# Altium integrated library VIETTIEN.IntLib: 150 symbols (part 5 of 7)

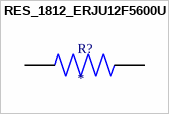
[diagram p92: symbol RES_1812_ERJU12F5600U]

## RES_1812_ERJU12F5600U
designator R?
RES 1812; MP: ERJU12F5600U; Package: None; Value: *; Availability: Unavailable; Price: None
footprint RES_ERJU12F5600U
pins: 1, 2


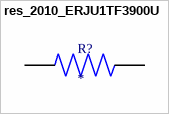
[diagram p93: symbol res_2010_ERJU1TF3900U]

## res_2010_ERJU1TF3900U
designator R?
RES 2010; MP: ERJU1TF3900U; Price: None; Value: *; Availability: Unavailable; Package: None
footprint RES_ERJU1TF3900U
pins: 1, 2


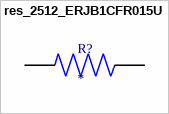
[diagram p94: symbol res_2512_ERJB1CFR015U]

## res_2512_ERJB1CFR015U
designator R?
RES 2512; MP: ERJB1CFR015U; Price: None; Value: *; Package: None; Availability: Unavailable
footprint RES_ERJB1CFR015U
pins: 1, 2


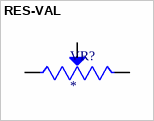
[diagram p95: symbol RES-VAL]

## RES-VAL
designator VR?
Trimmer, Cermet, Rest 1 Kilohms, PCB, 25 Turns, Pwr-Rtg 0.5W | Bourns 3296W-1-102LF; SnapEDA_Link: https://www.snapeda.com/parts/3296W-1-102LF/Bourns/view-part/?ref=snap; Package: NON STANDARD-3 Bourns; Value: *; MF: Bourns; MP: 3296W-1-102LF; Check_prices: https://www.snapeda.com/parts/3296W-1-102LF/Bourns/view-part/?ref=eda
footprint TRIM_3296W-1-102LF
pins: 1 CCW, 2 WIPER, 3 CW


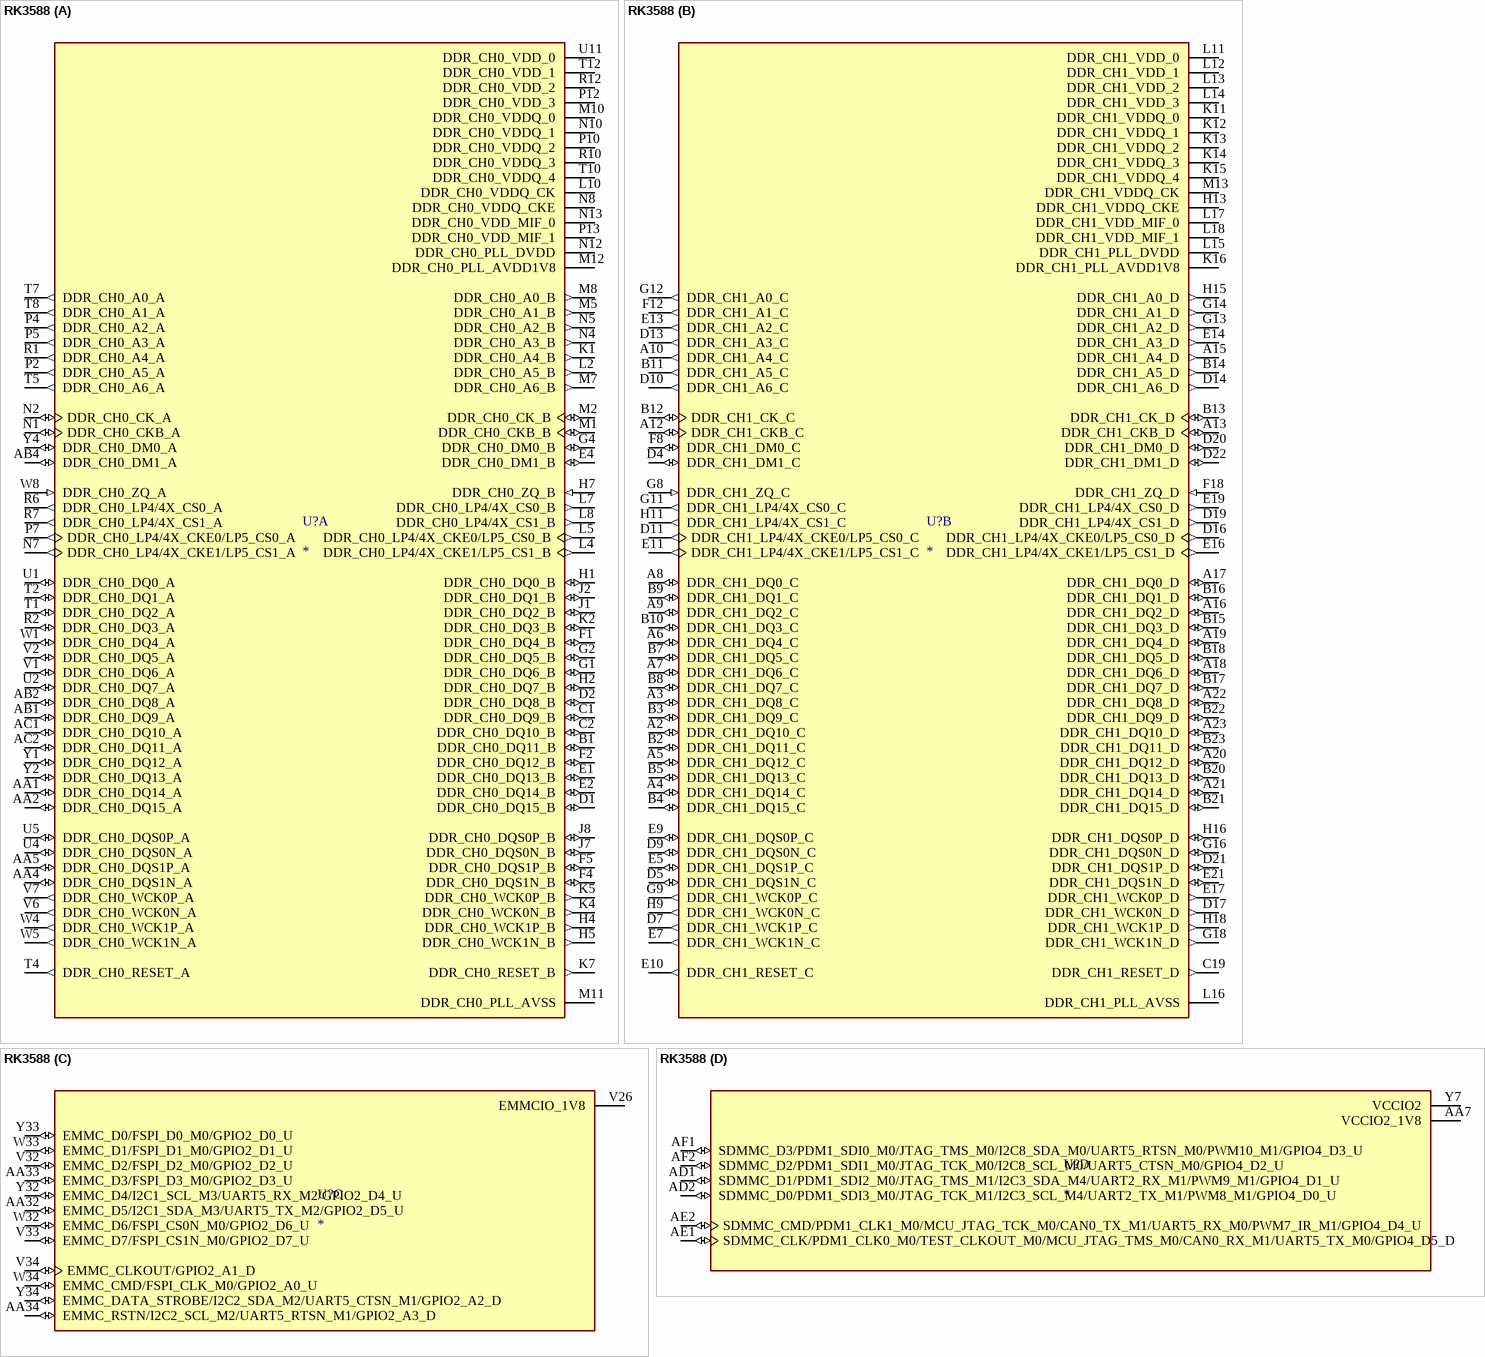
[diagram p96: symbol RK3588]

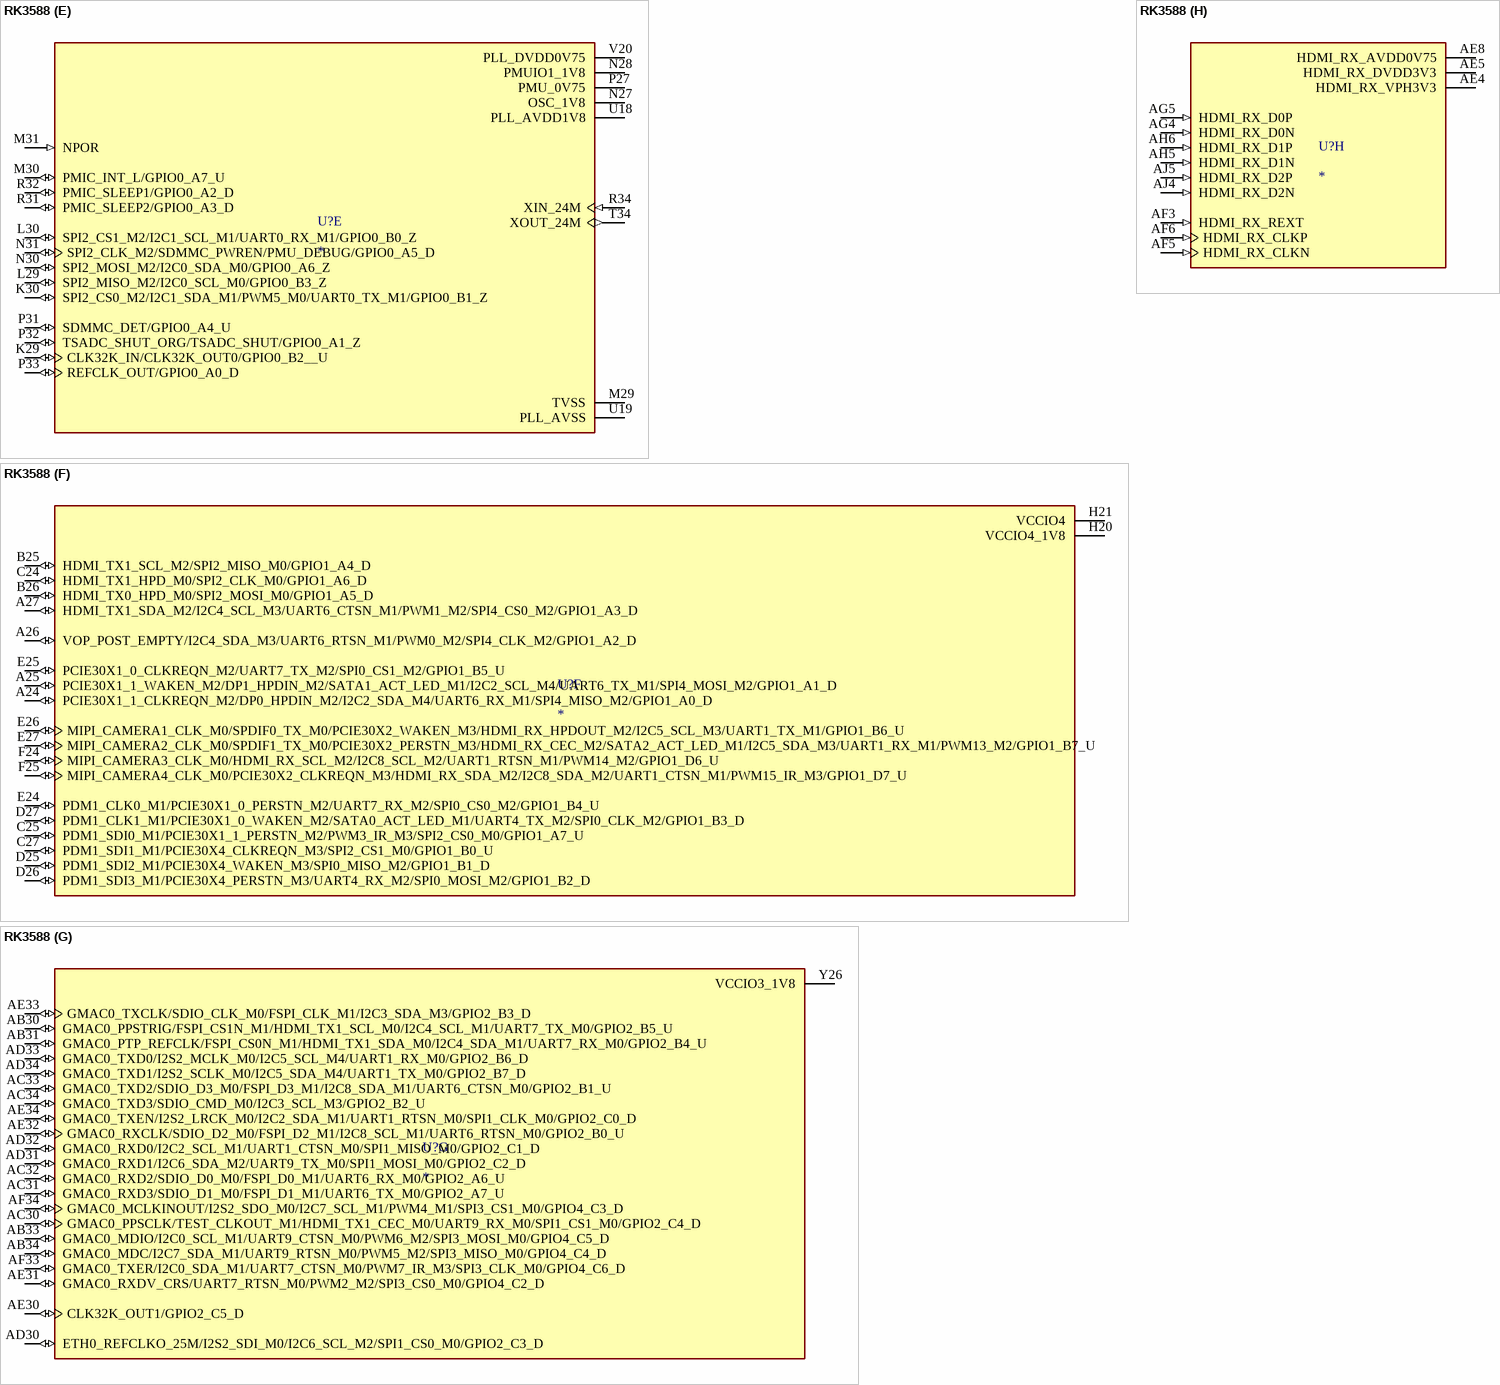
[diagram p97: symbol RK3588]

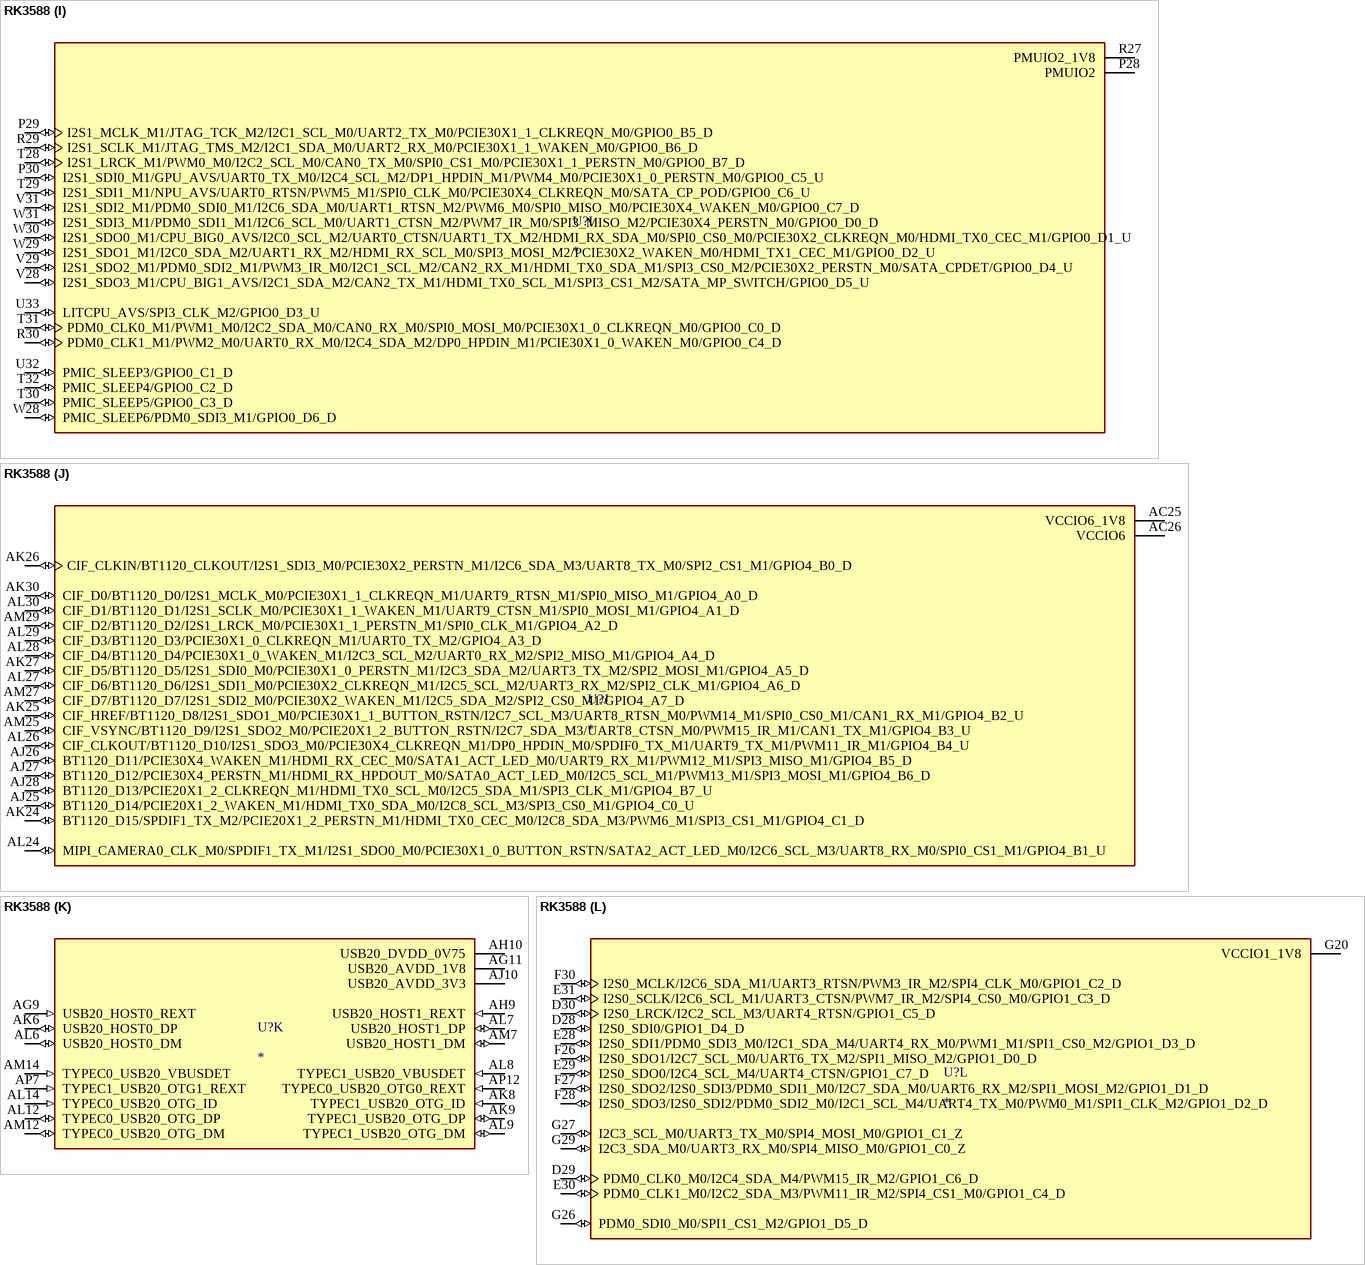
[diagram p98: symbol RK3588]

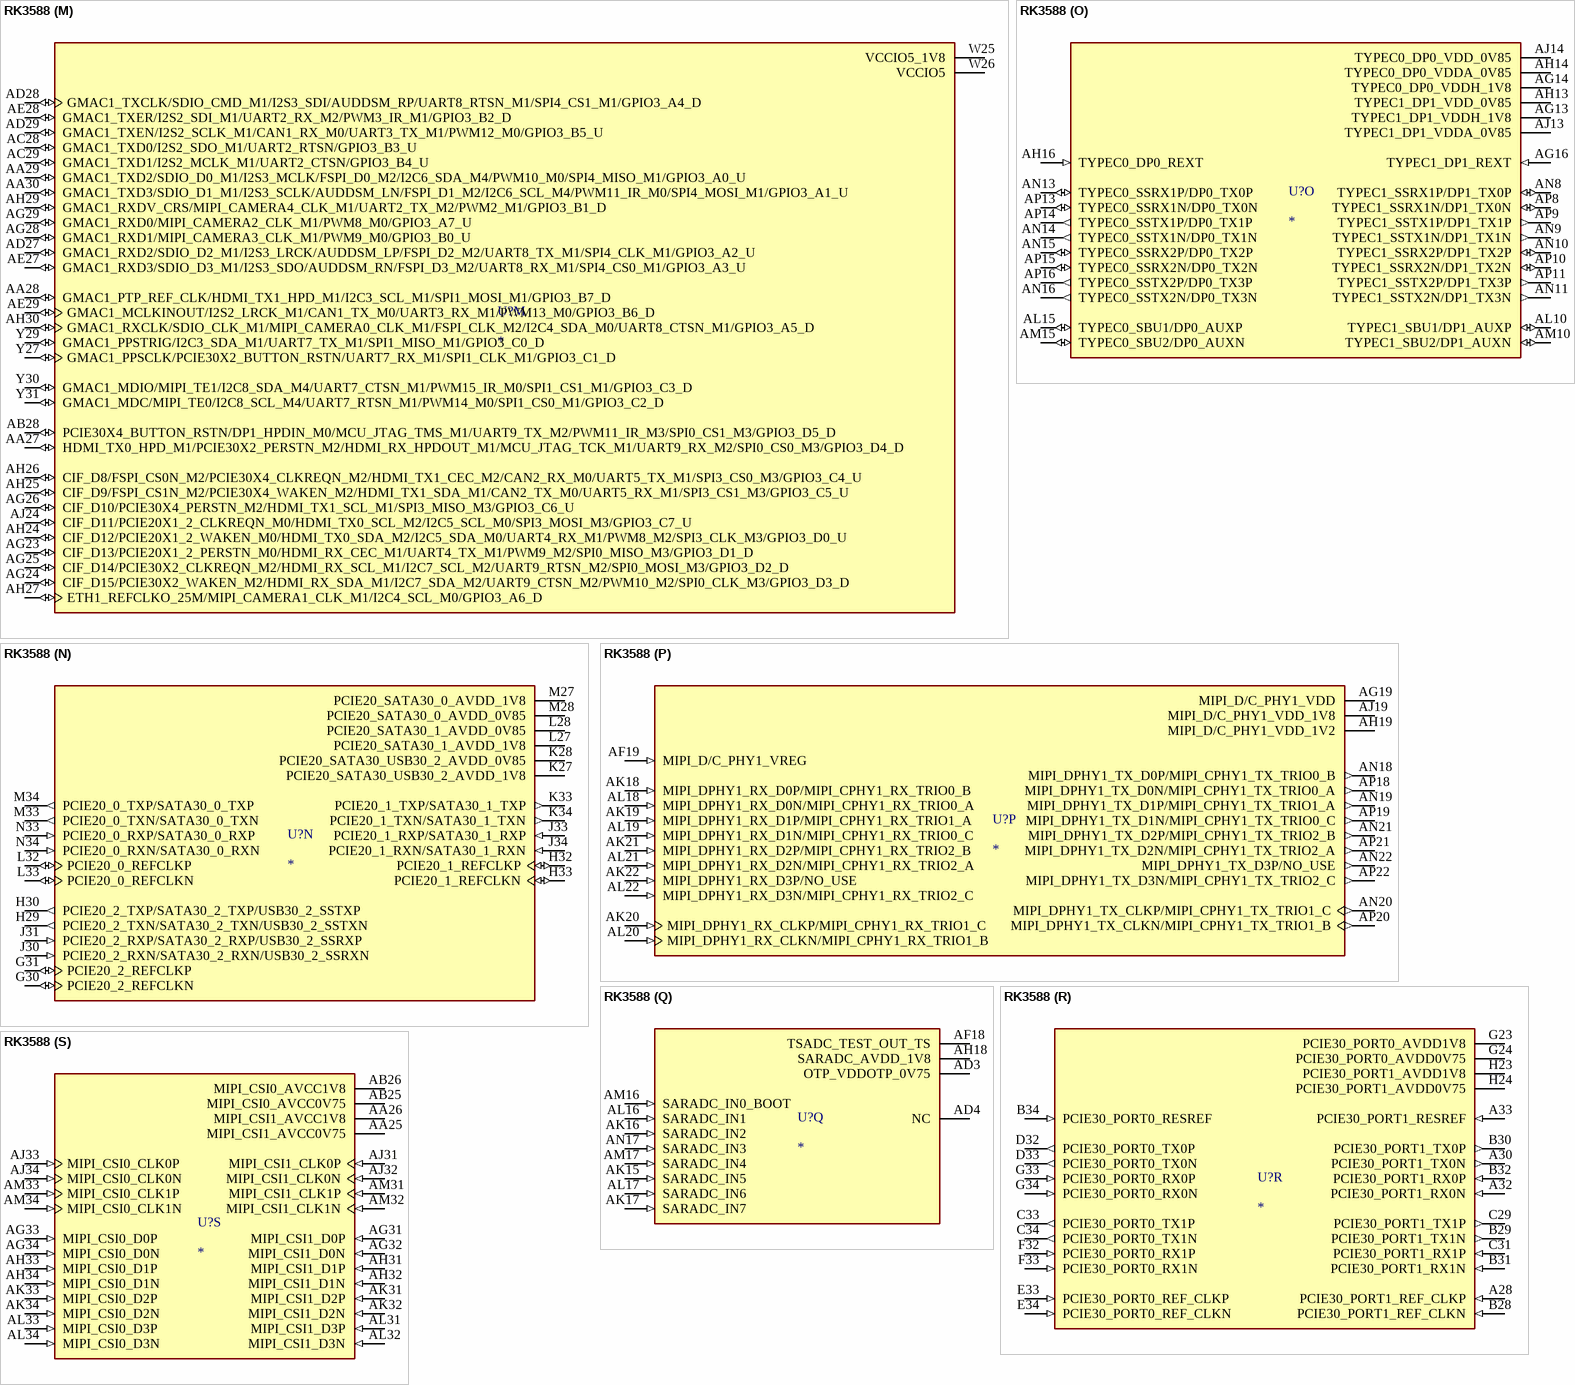
[diagram p99: symbol RK3588]

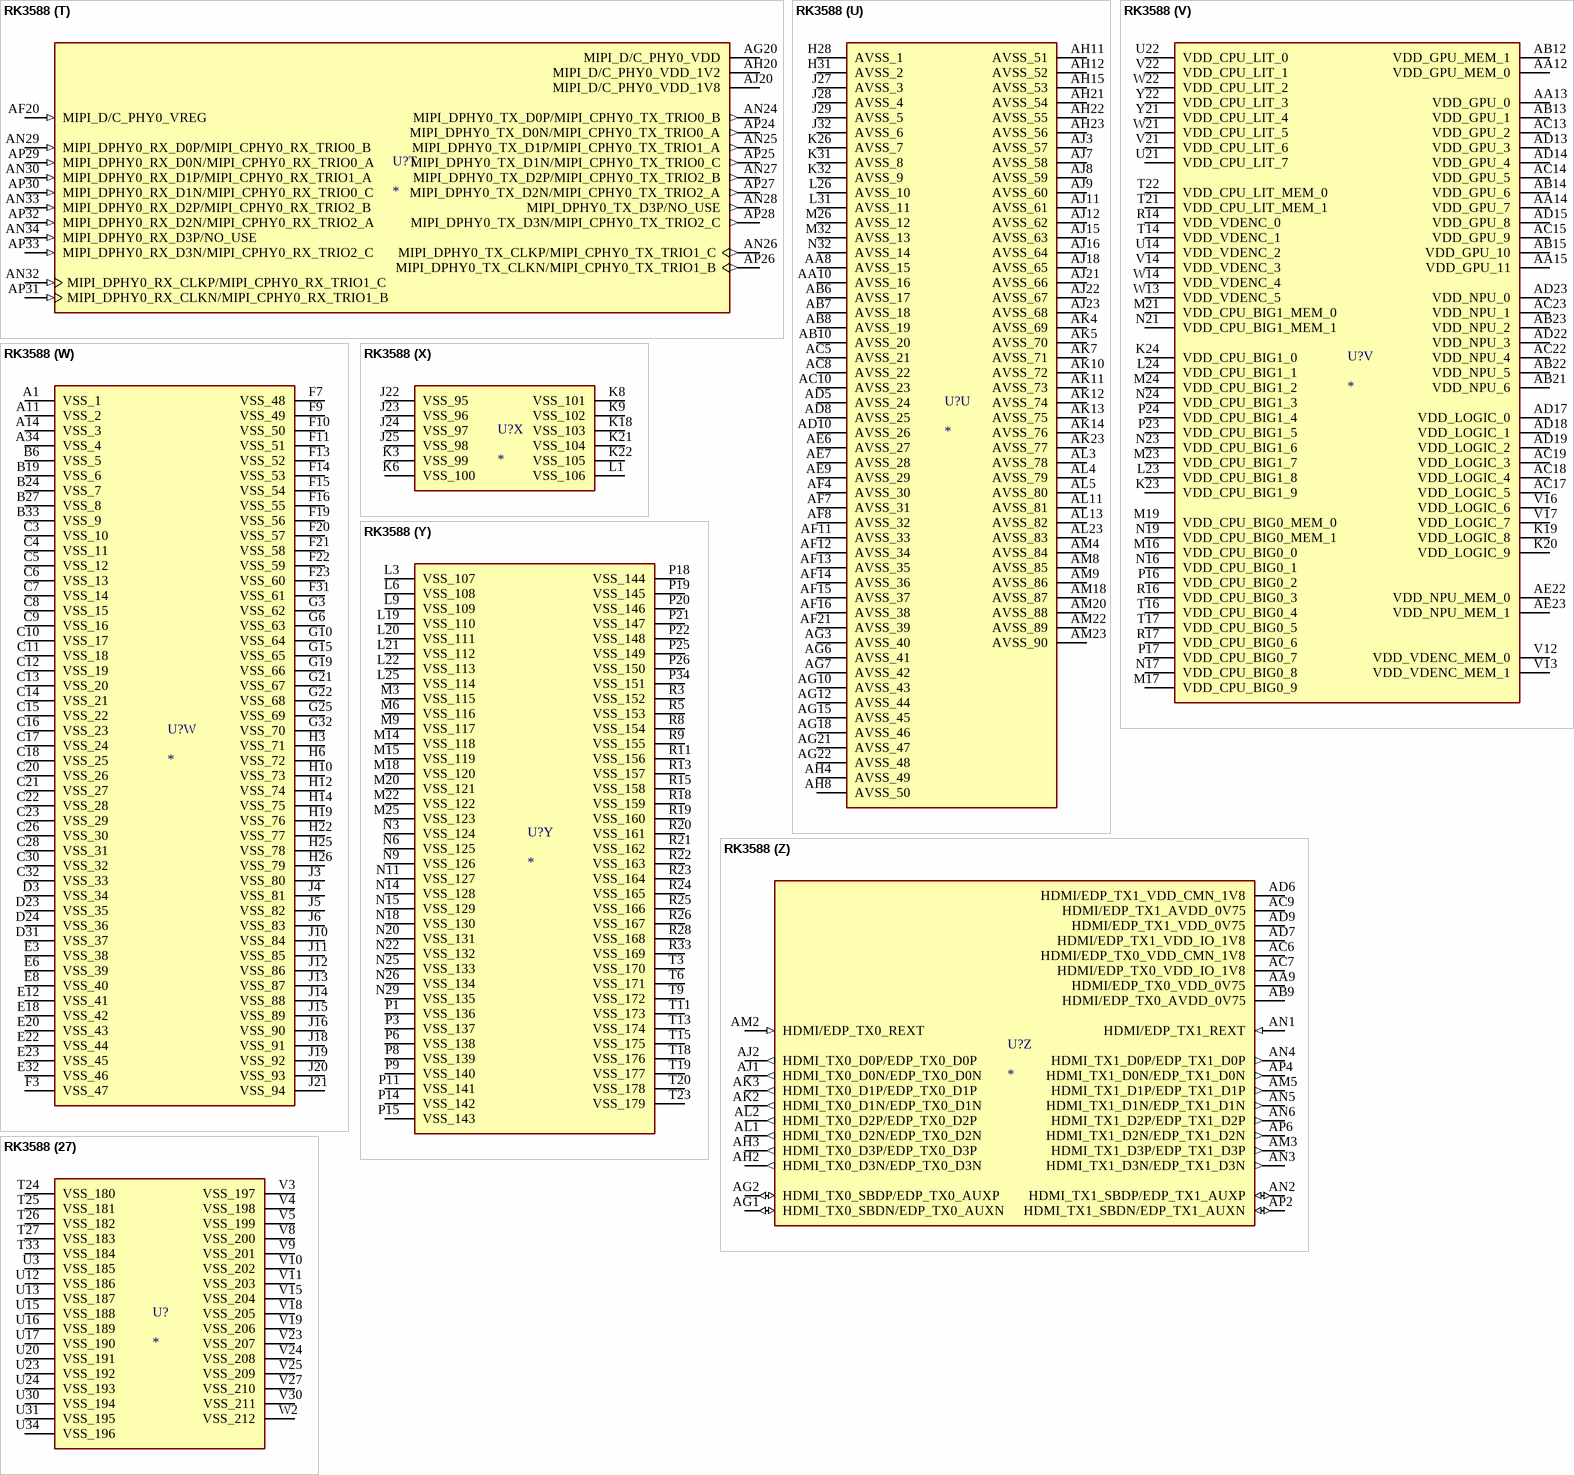
[diagram p100: symbol RK3588]

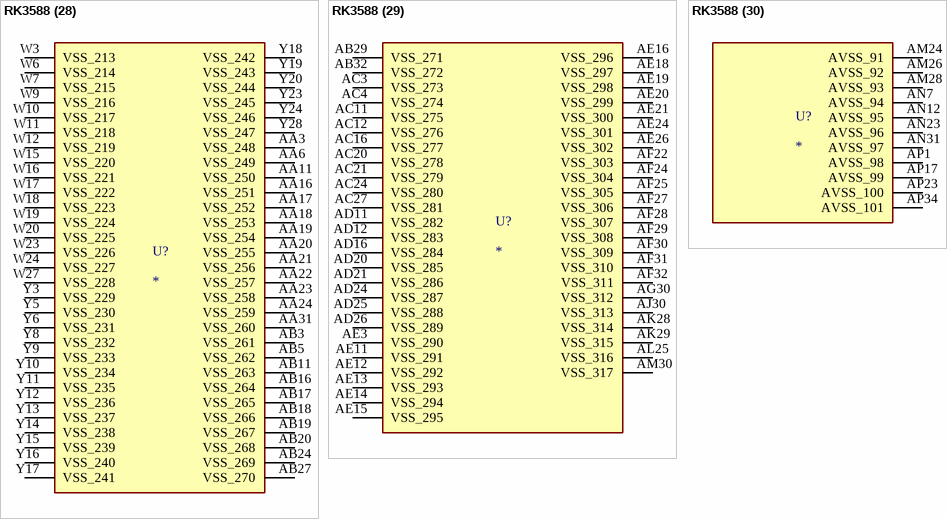
[diagram p101: symbol RK3588]

## RK3588
designator U?
low power, high performance processor; MF: Fuzhou Rockchip Electronics Co; MP: RK3588; SnapEDA_Link: https://www.snapeda.com/parts/RK3588/Fuzhou+Rockchip+Electronics+Co/view-part/?ref=snap; Package: None; Value: *; Check_prices: https://www.snapeda.com/parts/RK3588/Fuzhou+Rockchip+Electronics+Co/view-part/?ref=eda
footprint BGA1088C65P34X34_2300X2300X204N
part A pins: AA1 DDR_CH0_DQ14_A (io), AA2 DDR_CH0_DQ15_A (io), AA4 DDR_CH0_DQS1N_A (io), AA5 DDR_CH0_DQS1P_A (io), AB1 DDR_CH0_DQ9_A (io), AB2 DDR_CH0_DQ8_A (io), AB4 DDR_CH0_DM1_A (io), AC1 DDR_CH0_DQ10_A (io), AC2 DDR_CH0_DQ11_A (io), B1 DDR_CH0_DQ11_B (io), C1 DDR_CH0_DQ9_B (io), C2 DDR_CH0_DQ10_B (io), D1 DDR_CH0_DQ15_B (io), D2 DDR_CH0_DQ8_B (io), E1 DDR_CH0_DQ13_B (io), E2 DDR_CH0_DQ14_B (io), E4 DDR_CH0_DM1_B (io), F1 DDR_CH0_DQ4_B (io), F2 DDR_CH0_DQ12_B (io), F4 DDR_CH0_DQS1N_B (io), F5 DDR_CH0_DQS1P_B (io), G1 DDR_CH0_DQ6_B (io), G2 DDR_CH0_DQ5_B (io), G4 DDR_CH0_DM0_B (io), H1 DDR_CH0_DQ0_B (io), H2 DDR_CH0_DQ7_B (io), H4 DDR_CH0_WCK1P_B (out), H5 DDR_CH0_WCK1N_B (out), H7 DDR_CH0_ZQ_B (in), J1 DDR_CH0_DQ2_B (io), J2 DDR_CH0_DQ1_B (io), J7 DDR_CH0_DQS0N_B (io), J8 DDR_CH0_DQS0P_B (io), K1 DDR_CH0_A4_B (out), K2 DDR_CH0_DQ3_B (io), K4 DDR_CH0_WCK0N_B (out), K5 DDR_CH0_WCK0P_B (out), K7 DDR_CH0_RESET_B (out), L2 DDR_CH0_A5_B (out), L4 DDR_CH0_LP4/4X_CKE1/LP5_CS1_B (out), L5 DDR_CH0_LP4/4X_CKE0/LP5_CS0_B (out), L7 DDR_CH0_LP4/4X_CS0_B (out), L8 DDR_CH0_LP4/4X_CS1_B (out), L10 DDR_CH0_VDDQ_CK (power), M1 DDR_CH0_CKB_B (io), M2 DDR_CH0_CK_B (io), M5 DDR_CH0_A1_B (out), M7 DDR_CH0_A6_B (out), M8 DDR_CH0_A0_B (out), M10 DDR_CH0_VDDQ_0 (power), M11 DDR_CH0_PLL_AVSS (power), M12 DDR_CH0_PLL_AVDD1V8 (power), N1 DDR_CH0_CKB_A (io), N2 DDR_CH0_CK_A (io), N4 DDR_CH0_A3_B (out), N5 DDR_CH0_A2_B (out), N7 DDR_CH0_LP4/4X_CKE1/LP5_CS1_A (out), N8 DDR_CH0_VDDQ_CKE (power), N10 DDR_CH0_VDDQ_1 (power), N12 DDR_CH0_PLL_DVDD (power), N13 DDR_CH0_VDD_MIF_0 (power), P2 DDR_CH0_A5_A (out), P4 DDR_CH0_A2_A (out), P5 DDR_CH0_A3_A (out), P7 DDR_CH0_LP4/4X_CKE0/LP5_CS0_A (out), P10 DDR_CH0_VDDQ_2 (power), P12 DDR_CH0_VDD_3 (power), P13 DDR_CH0_VDD_MIF_1 (power), R1 DDR_CH0_A4_A (out), R2 DDR_CH0_DQ3_A (io), R6 DDR_CH0_LP4/4X_CS0_A (out), R7 DDR_CH0_LP4/4X_CS1_A (out), R10 DDR_CH0_VDDQ_3 (power), R12 DDR_CH0_VDD_2 (power), T1 DDR_CH0_DQ2_A (io), T2 DDR_CH0_DQ1_A (io), T4 DDR_CH0_RESET_A (out), T5 DDR_CH0_A6_A (out), T7 DDR_CH0_A0_A (out), T8 DDR_CH0_A1_A (out), T10 DDR_CH0_VDDQ_4 (power), T12 DDR_CH0_VDD_1 (power), U1 DDR_CH0_DQ0_A (io), U2 DDR_CH0_DQ7_A (io), U4 DDR_CH0_DQS0N_A (io), U5 DDR_CH0_DQS0P_A (io), U11 DDR_CH0_VDD_0 (power), V1 DDR_CH0_DQ6_A (io), V2 DDR_CH0_DQ5_A (io), V6 DDR_CH0_WCK0N_A (out), V7 DDR_CH0_WCK0P_A (out), W1 DDR_CH0_DQ4_A (io), W4 DDR_CH0_WCK1P_A (out), W5 DDR_CH0_WCK1N_A (out), W8 DDR_CH0_ZQ_A (in), Y1 DDR_CH0_DQ12_A (io), Y2 DDR_CH0_DQ13_A (io), Y4 DDR_CH0_DM0_A (io)
part B pins: A2 DDR_CH1_DQ10_C (io), A3 DDR_CH1_DQ8_C (io), A4 DDR_CH1_DQ14_C (io), A5 DDR_CH1_DQ12_C (io), A6 DDR_CH1_DQ4_C (io), A7 DDR_CH1_DQ6_C (io), A8 DDR_CH1_DQ0_C (io), A9 DDR_CH1_DQ2_C (io), A10 DDR_CH1_A4_C (out), A12 DDR_CH1_CKB_C (io), A13 DDR_CH1_CKB_D (io), A15 DDR_CH1_A4_D (out), A16 DDR_CH1_DQ2_D (io), A17 DDR_CH1_DQ0_D (io), A18 DDR_CH1_DQ6_D (io), A19 DDR_CH1_DQ4_D (io), A20 DDR_CH1_DQ12_D (io), A21 DDR_CH1_DQ14_D (io), A22 DDR_CH1_DQ8_D (io), A23 DDR_CH1_DQ10_D (io), B2 DDR_CH1_DQ11_C (io), B3 DDR_CH1_DQ9_C (io), B4 DDR_CH1_DQ15_C (io), B5 DDR_CH1_DQ13_C (io), B7 DDR_CH1_DQ5_C (io), B8 DDR_CH1_DQ7_C (io), B9 DDR_CH1_DQ1_C (io), B10 DDR_CH1_DQ3_C (io), B11 DDR_CH1_A5_C (out), B12 DDR_CH1_CK_C (io), B13 DDR_CH1_CK_D (io), B14 DDR_CH1_A5_D (out), B15 DDR_CH1_DQ3_D (io), B16 DDR_CH1_DQ1_D (io), B17 DDR_CH1_DQ7_D (io), B18 DDR_CH1_DQ5_D (io), B20 DDR_CH1_DQ13_D (io), B21 DDR_CH1_DQ15_D (io), B22 DDR_CH1_DQ9_D (io), B23 DDR_CH1_DQ11_D (io), C19 DDR_CH1_RESET_D (out), D4 DDR_CH1_DM1_C (io), D5 DDR_CH1_DQS1N_C (io), D7 DDR_CH1_WCK1P_C (out), D9 DDR_CH1_DQS0N_C (io), D10 DDR_CH1_A6_C (out), D11 DDR_CH1_LP4/4X_CKE0/LP5_CS0_C (out), D13 DDR_CH1_A3_C (out), D14 DDR_CH1_A6_D (out), D16 DDR_CH1_LP4/4X_CKE0/LP5_CS0_D (out), D17 DDR_CH1_WCK0N_D (out), D19 DDR_CH1_LP4/4X_CS1_D (out), D20 DDR_CH1_DM0_D (io), D21 DDR_CH1_DQS1P_D (io), D22 DDR_CH1_DM1_D (io), E5 DDR_CH1_DQS1P_C (io), E7 DDR_CH1_WCK1N_C (out), E9 DDR_CH1_DQS0P_C (io), E10 DDR_CH1_RESET_C (out), E11 DDR_CH1_LP4/4X_CKE1/LP5_CS1_C (out), E13 DDR_CH1_A2_C (out), E14 DDR_CH1_A3_D (out), E16 DDR_CH1_LP4/4X_CKE1/LP5_CS1_D (out), E17 DDR_CH1_WCK0P_D (out), E19 DDR_CH1_LP4/4X_CS0_D (out), E21 DDR_CH1_DQS1N_D (io), F8 DDR_CH1_DM0_C (io), F12 DDR_CH1_A1_C (out), F18 DDR_CH1_ZQ_D (in), G8 DDR_CH1_ZQ_C (in), G9 DDR_CH1_WCK0P_C (out), G11 DDR_CH1_LP4/4X_CS0_C (out), G12 DDR_CH1_A0_C (out), G13 DDR_CH1_A2_D (out), G14 DDR_CH1_A1_D (out), G16 DDR_CH1_DQS0N_D (io), G18 DDR_CH1_WCK1N_D (out), H9 DDR_CH1_WCK0N_C (out), H11 DDR_CH1_LP4/4X_CS1_C (out), H13 DDR_CH1_VDDQ_CKE (power), H15 DDR_CH1_A0_D (out), H16 DDR_CH1_DQS0P_D (io), H18 DDR_CH1_WCK1P_D (out), K11 DDR_CH1_VDDQ_0 (power), K12 DDR_CH1_VDDQ_1 (power), K13 DDR_CH1_VDDQ_2 (power), K14 DDR_CH1_VDDQ_3 (power), K15 DDR_CH1_VDDQ_4 (power), K16 DDR_CH1_PLL_AVDD1V8 (power), L11 DDR_CH1_VDD_0 (power), L12 DDR_CH1_VDD_1 (power), L13 DDR_CH1_VDD_2 (power), L14 DDR_CH1_VDD_3 (power), L15 DDR_CH1_PLL_DVDD (power), L16 DDR_CH1_PLL_AVSS (power), L17 DDR_CH1_VDD_MIF_0 (power), L18 DDR_CH1_VDD_MIF_1 (power), M13 DDR_CH1_VDDQ_CK (power)
part C pins: AA32 EMMC_D5/I2C1_SDA_M3/UART5_TX_M2/GPIO2_D5_U (io), AA33 EMMC_D3/FSPI_D3_M0/GPIO2_D3_U (io), AA34 EMMC_RSTN/I2C2_SCL_M2/UART5_RTSN_M1/GPIO2_A3_D (io), V26 EMMCIO_1V8 (power), V32 EMMC_D2/FSPI_D2_M0/GPIO2_D2_U (io), V33 EMMC_D7/FSPI_CS1N_M0/GPIO2_D7_U (io), V34 EMMC_CLKOUT/GPIO2_A1_D (io), W32 EMMC_D6/FSPI_CS0N_M0/GPIO2_D6_U (io), W33 EMMC_D1/FSPI_D1_M0/GPIO2_D1_U (io), W34 EMMC_CMD/FSPI_CLK_M0/GPIO2_A0_U (io), Y32 EMMC_D4/I2C1_SCL_M3/UART5_RX_M2/GPIO2_D4_U (io), Y33 EMMC_D0/FSPI_D0_M0/GPIO2_D0_U (io), Y34 EMMC_DATA_STROBE/I2C2_SDA_M2/UART5_CTSN_M1/GPIO2_A2_D (io)
part D pins: AA7 VCCIO2_1V8 (power), AD1 SDMMC_D1/PDM1_SDI2_M0/JTAG_TMS_M1/I2C3_SDA_M4/UART2_RX_M1/PWM9_M1/GPIO4_D1_U (io), AD2 SDMMC_D0/PDM1_SDI3_M0/JTAG_TCK_M1/I2C3_SCL_M4/UART2_TX_M1/PWM8_M1/GPIO4_D0_U (io), AE1 SDMMC_CLK/PDM1_CLK0_M0/TEST_CLKOUT_M0/MCU_JTAG_TMS_M0/CAN0_RX_M1/UART5_TX_M0/GPIO4_D5_D (io), AE2 SDMMC_CMD/PDM1_CLK1_M0/MCU_JTAG_TCK_M0/CAN0_TX_M1/UART5_RX_M0/PWM7_IR_M1/GPIO4_D4_U (io), AF1 SDMMC_D3/PDM1_SDI0_M0/JTAG_TMS_M0/I2C8_SDA_M0/UART5_RTSN_M0/PWM10_M1/GPIO4_D3_U (io), AF2 SDMMC_D2/PDM1_SDI1_M0/JTAG_TCK_M0/I2C8_SCL_M0/UART5_CTSN_M0/GPIO4_D2_U (io), Y7 VCCIO2 (power)
part E pins: K29 CLK32K_IN/CLK32K_OUT0/GPIO0_B2__U (io), K30 SPI2_CS0_M2/I2C1_SDA_M1/PWM5_M0/UART0_TX_M1/GPIO0_B1_Z (io), L29 SPI2_MISO_M2/I2C0_SCL_M0/GPIO0_B3_Z (io), L30 SPI2_CS1_M2/I2C1_SCL_M1/UART0_RX_M1/GPIO0_B0_Z (io), M29 TVSS (power), M30 PMIC_INT_L/GPIO0_A7_U (io), M31 NPOR (in), N27 OSC_1V8 (power), N28 PMUIO1_1V8 (power), N30 SPI2_MOSI_M2/I2C0_SDA_M0/GPIO0_A6_Z (io), N31 SPI2_CLK_M2/SDMMC_PWREN/PMU_DEBUG/GPIO0_A5_D (io), P27 PMU_0V75 (power), P31 SDMMC_DET/GPIO0_A4_U (io), P32 TSADC_SHUT_ORG/TSADC_SHUT/GPIO0_A1_Z (io), P33 REFCLK_OUT/GPIO0_A0_D (io), R31 PMIC_SLEEP2/GPIO0_A3_D (io), R32 PMIC_SLEEP1/GPIO0_A2_D (io), R34 XIN_24M (in), T34 XOUT_24M (out), U18 PLL_AVDD1V8 (power), U19 PLL_AVSS (power), V20 PLL_DVDD0V75 (power)
part F pins: A24 PCIE30X1_1_CLKREQN_M2/DP0_HPDIN_M2/I2C2_SDA_M4/UART6_RX_M1/SPI4_MISO_M2/GPIO1_A0_D (io), A25 PCIE30X1_1_WAKEN_M2/DP1_HPDIN_M2/SATA1_ACT_LED_M1/I2C2_SCL_M4/UART6_TX_M1/SPI4_MOSI_M2/GPIO1_A1_D (io), A26 VOP_POST_EMPTY/I2C4_SDA_M3/UART6_RTSN_M1/PWM0_M2/SPI4_CLK_M2/GPIO1_A2_D (io), A27 HDMI_TX1_SDA_M2/I2C4_SCL_M3/UART6_CTSN_M1/PWM1_M2/SPI4_CS0_M2/GPIO1_A3_D (io), B25 HDMI_TX1_SCL_M2/SPI2_MISO_M0/GPIO1_A4_D (io), B26 HDMI_TX0_HPD_M0/SPI2_MOSI_M0/GPIO1_A5_D (io), C24 HDMI_TX1_HPD_M0/SPI2_CLK_M0/GPIO1_A6_D (io), C25 PDM1_SDI0_M1/PCIE30X1_1_PERSTN_M2/PWM3_IR_M3/SPI2_CS0_M0/GPIO1_A7_U (io), C27 PDM1_SDI1_M1/PCIE30X4_CLKREQN_M3/SPI2_CS1_M0/GPIO1_B0_U (io), D25 PDM1_SDI2_M1/PCIE30X4_WAKEN_M3/SPI0_MISO_M2/GPIO1_B1_D (io), D26 PDM1_SDI3_M1/PCIE30X4_PERSTN_M3/UART4_RX_M2/SPI0_MOSI_M2/GPIO1_B2_D (io), D27 PDM1_CLK1_M1/PCIE30X1_0_WAKEN_M2/SATA0_ACT_LED_M1/UART4_TX_M2/SPI0_CLK_M2/GPIO1_B3_D (io), E24 PDM1_CLK0_M1/PCIE30X1_0_PERSTN_M2/UART7_RX_M2/SPI0_CS0_M2/GPIO1_B4_U (io), E25 PCIE30X1_0_CLKREQN_M2/UART7_TX_M2/SPI0_CS1_M2/GPIO1_B5_U (io), E26 MIPI_CAMERA1_CLK_M0/SPDIF0_TX_M0/PCIE30X2_WAKEN_M3/HDMI_RX_HPDOUT_M2/I2C5_SCL_M3/UART1_TX_M1/GPIO1_B6_U (io), E27 MIPI_CAMERA2_CLK_M0/SPDIF1_TX_M0/PCIE30X2_PERSTN_M3/HDMI_RX_CEC_M2/SATA2_ACT_LED_M1/I2C5_SDA_M3/UART1_RX_M1/PWM13_M2/GPIO1_B7_U (io), F24 MIPI_CAMERA3_CLK_M0/HDMI_RX_SCL_M2/I2C8_SCL_M2/UART1_RTSN_M1/PWM14_M2/GPIO1_D6_U (io), F25 MIPI_CAMERA4_CLK_M0/PCIE30X2_CLKREQN_M3/HDMI_RX_SDA_M2/I2C8_SDA_M2/UART1_CTSN_M1/PWM15_IR_M3/GPIO1_D7_U (io), H20 VCCIO4_1V8 (power), H21 VCCIO4 (power)
part G pins: AB30 GMAC0_PPSTRIG/FSPI_CS1N_M1/HDMI_TX1_SCL_M0/I2C4_SCL_M1/UART7_TX_M0/GPIO2_B5_U (io), AB31 GMAC0_PTP_REFCLK/FSPI_CS0N_M1/HDMI_TX1_SDA_M0/I2C4_SDA_M1/UART7_RX_M0/GPIO2_B4_U (io), AB33 GMAC0_MDIO/I2C0_SCL_M1/UART9_CTSN_M0/PWM6_M2/SPI3_MOSI_M0/GPIO4_C5_D (io), AB34 GMAC0_MDC/I2C7_SDA_M1/UART9_RTSN_M0/PWM5_M2/SPI3_MISO_M0/GPIO4_C4_D (io), AC30 GMAC0_PPSCLK/TEST_CLKOUT_M1/HDMI_TX1_CEC_M0/UART9_RX_M0/SPI1_CS1_M0/GPIO2_C4_D (io), AC31 GMAC0_RXD3/SDIO_D1_M0/FSPI_D1_M1/UART6_TX_M0/GPIO2_A7_U (io), AC32 GMAC0_RXD2/SDIO_D0_M0/FSPI_D0_M1/UART6_RX_M0/GPIO2_A6_U (io), AC33 GMAC0_TXD2/SDIO_D3_M0/FSPI_D3_M1/I2C8_SDA_M1/UART6_CTSN_M0/GPIO2_B1_U (io), AC34 GMAC0_TXD3/SDIO_CMD_M0/I2C3_SCL_M3/GPIO2_B2_U (io), AD30 ETH0_REFCLKO_25M/I2S2_SDI_M0/I2C6_SCL_M2/SPI1_CS0_M0/GPIO2_C3_D (io), AD31 GMAC0_RXD1/I2C6_SDA_M2/UART9_TX_M0/SPI1_MOSI_M0/GPIO2_C2_D (io), AD32 GMAC0_RXD0/I2C2_SCL_M1/UART1_CTSN_M0/SPI1_MISO_M0/GPIO2_C1_D (io), AD33 GMAC0_TXD0/I2S2_MCLK_M0/I2C5_SCL_M4/UART1_RX_M0/GPIO2_B6_D (io), AD34 GMAC0_TXD1/I2S2_SCLK_M0/I2C5_SDA_M4/UART1_TX_M0/GPIO2_B7_D (io), AE30 CLK32K_OUT1/GPIO2_C5_D (io), AE31 GMAC0_RXDV_CRS/UART7_RTSN_M0/PWM2_M2/SPI3_CS0_M0/GPIO4_C2_D (io), AE32 GMAC0_RXCLK/SDIO_D2_M0/FSPI_D2_M1/I2C8_SCL_M1/UART6_RTSN_M0/GPIO2_B0_U (io), AE33 GMAC0_TXCLK/SDIO_CLK_M0/FSPI_CLK_M1/I2C3_SDA_M3/GPIO2_B3_D (io), AE34 GMAC0_TXEN/I2S2_LRCK_M0/I2C2_SDA_M1/UART1_RTSN_M0/SPI1_CLK_M0/GPIO2_C0_D (io), AF33 GMAC0_TXER/I2C0_SDA_M1/UART7_CTSN_M0/PWM7_IR_M3/SPI3_CLK_M0/GPIO4_C6_D (io), AF34 GMAC0_MCLKINOUT/I2S2_SDO_M0/I2C7_SCL_M1/PWM4_M1/SPI3_CS1_M0/GPIO4_C3_D (io), Y26 VCCIO3_1V8 (power)
part H pins: AE4 HDMI_RX_VPH3V3 (power), AE5 HDMI_RX_DVDD3V3 (power), AE8 HDMI_RX_AVDD0V75 (power), AF3 HDMI_RX_REXT (in), AF5 HDMI_RX_CLKN (in), AF6 HDMI_RX_CLKP (in), AG4 HDMI_RX_D0N (in), AG5 HDMI_RX_D0P (in), AH5 HDMI_RX_D1N (in), AH6 HDMI_RX_D1P (in), AJ4 HDMI_RX_D2N (in), AJ5 HDMI_RX_D2P (in)
part I pins: P28 PMUIO2 (power), P29 I2S1_MCLK_M1/JTAG_TCK_M2/I2C1_SCL_M0/UART2_TX_M0/PCIE30X1_1_CLKREQN_M0/GPIO0_B5_D (io), P30 I2S1_SDI0_M1/GPU_AVS/UART0_TX_M0/I2C4_SCL_M2/DP1_HPDIN_M1/PWM4_M0/PCIE30X1_0_PERSTN_M0/GPIO0_C5_U (io), R27 PMUIO2_1V8 (power), R29 I2S1_SCLK_M1/JTAG_TMS_M2/I2C1_SDA_M0/UART2_RX_M0/PCIE30X1_1_WAKEN_M0/GPIO0_B6_D (io), R30 PDM0_CLK1_M1/PWM2_M0/UART0_RX_M0/I2C4_SDA_M2/DP0_HPDIN_M1/PCIE30X1_0_WAKEN_M0/GPIO0_C4_D (io), T28 I2S1_LRCK_M1/PWM0_M0/I2C2_SCL_M0/CAN0_TX_M0/SPI0_CS1_M0/PCIE30X1_1_PERSTN_M0/GPIO0_B7_D (io), T29 I2S1_SDI1_M1/NPU_AVS/UART0_RTSN/PWM5_M1/SPI0_CLK_M0/PCIE30X4_CLKREQN_M0/SATA_CP_POD/GPIO0_C6_U (io), T30 PMIC_SLEEP5/GPIO0_C3_D (io), T31 PDM0_CLK0_M1/PWM1_M0/I2C2_SDA_M0/CAN0_RX_M0/SPI0_MOSI_M0/PCIE30X1_0_CLKREQN_M0/GPIO0_C0_D (io), T32 PMIC_SLEEP4/GPIO0_C2_D (io), U32 PMIC_SLEEP3/GPIO0_C1_D (io), U33 LITCPU_AVS/SPI3_CLK_M2/GPIO0_D3_U (io), V28 I2S1_SDO3_M1/CPU_BIG1_AVS/I2C1_SDA_M2/CAN2_TX_M1/HDMI_TX0_SCL_M1/SPI3_CS1_M2/SATA_MP_SWITCH/GPIO0_D5_U (io), V29 I2S1_SDO2_M1/PDM0_SDI2_M1/PWM3_IR_M0/I2C1_SCL_M2/CAN2_RX_M1/HDMI_TX0_SDA_M1/SPI3_CS0_M2/PCIE30X2_PERSTN_M0/SATA_CPDET/GPIO0_D4_U (io), V31 I2S1_SDI2_M1/PDM0_SDI0_M1/I2C6_SDA_M0/UART1_RTSN_M2/PWM6_M0/SPI0_MISO_M0/PCIE30X4_WAKEN_M0/GPIO0_C7_D (io), W28 PMIC_SLEEP6/PDM0_SDI3_M1/GPIO0_D6_D (io), W29 I2S1_SDO1_M1/I2C0_SDA_M2/UART1_RX_M2/HDMI_RX_SCL_M0/SPI3_MOSI_M2/PCIE30X2_WAKEN_M0/HDMI_TX1_CEC_M1/GPIO0_D2_U (io), W30 I2S1_SDO0_M1/CPU_BIG0_AVS/I2C0_SCL_M2/UART0_CTSN/UART1_TX_M2/HDMI_RX_SDA_M0/SPI0_CS0_M0/PCIE30X2_CLKREQN_M0/HDMI_TX0_CEC_M1/GPIO0_D1_U (io), W31 I2S1_SDI3_M1/PDM0_SDI1_M1/I2C6_SCL_M0/UART1_CTSN_M2/PWM7_IR_M0/SPI3_MISO_M2/PCIE30X4_PERSTN_M0/GPIO0_D0_D (io)
part J pins: AC25 VCCIO6_1V8 (power), AC26 VCCIO6 (power), AJ25 BT1120_D14/PCIE20X1_2_WAKEN_M1/HDMI_TX0_SDA_M0/I2C8_SCL_M3/SPI3_CS0_M1/GPIO4_C0_U (io), AJ26 BT1120_D11/PCIE30X4_WAKEN_M1/HDMI_RX_CEC_M0/SATA1_ACT_LED_M0/UART9_RX_M1/PWM12_M1/SPI3_MISO_M1/GPIO4_B5_D (io), AJ27 BT1120_D12/PCIE30X4_PERSTN_M1/HDMI_RX_HPDOUT_M0/SATA0_ACT_LED_M0/I2C5_SCL_M1/PWM13_M1/SPI3_MOSI_M1/GPIO4_B6_D (io), AJ28 BT1120_D13/PCIE20X1_2_CLKREQN_M1/HDMI_TX0_SCL_M0/I2C5_SDA_M1/SPI3_CLK_M1/GPIO4_B7_U (io), AK24 BT1120_D15/SPDIF1_TX_M2/PCIE20X1_2_PERSTN_M1/HDMI_TX0_CEC_M0/I2C8_SDA_M3/PWM6_M1/SPI3_CS1_M1/GPIO4_C1_D (io), AK25 CIF_HREF/BT1120_D8/I2S1_SDO1_M0/PCIE30X1_1_BUTTON_RSTN/I2C7_SCL_M3/UART8_RTSN_M0/PWM14_M1/SPI0_CS0_M1/CAN1_RX_M1/GPIO4_B2_U (io), AK26 CIF_CLKIN/BT1120_CLKOUT/I2S1_SDI3_M0/PCIE30X2_PERSTN_M1/I2C6_SDA_M3/UART8_TX_M0/SPI2_CS1_M1/GPIO4_B0_D (io), AK27 CIF_D5/BT1120_D5/I2S1_SDI0_M0/PCIE30X1_0_PERSTN_M1/I2C3_SDA_M2/UART3_TX_M2/SPI2_MOSI_M1/GPIO4_A5_D (io), AK30 CIF_D0/BT1120_D0/I2S1_MCLK_M0/PCIE30X1_1_CLKREQN_M1/UART9_RTSN_M1/SPI0_MISO_M1/GPIO4_A0_D (io), AL24 MIPI_CAMERA0_CLK_M0/SPDIF1_TX_M1/I2S1_SDO0_M0/PCIE30X1_0_BUTTON_RSTN/SATA2_ACT_LED_M0/I2C6_SCL_M3/UART8_RX_M0/SPI0_CS1_M1/GPIO4_B1_U (io), AL26 CIF_CLKOUT/BT1120_D10/I2S1_SDO3_M0/PCIE30X4_CLKREQN_M1/DP0_HPDIN_M0/SPDIF0_TX_M1/UART9_TX_M1/PWM11_IR_M1/GPIO4_B4_U (io), AL27 CIF_D6/BT1120_D6/I2S1_SDI1_M0/PCIE30X2_CLKREQN_M1/I2C5_SCL_M2/UART3_RX_M2/SPI2_CLK_M1/GPIO4_A6_D (io), AL28 CIF_D4/BT1120_D4/PCIE30X1_0_WAKEN_M1/I2C3_SCL_M2/UART0_RX_M2/SPI2_MISO_M1/GPIO4_A4_D (io), AL29 CIF_D3/BT1120_D3/PCIE30X1_0_CLKREQN_M1/UART0_TX_M2/GPIO4_A3_D (io), AL30 CIF_D1/BT1120_D1/I2S1_SCLK_M0/PCIE30X1_1_WAKEN_M1/UART9_CTSN_M1/SPI0_MOSI_M1/GPIO4_A1_D (io), AM25 CIF_VSYNC/BT1120_D9/I2S1_SDO2_M0/PCIE20X1_2_BUTTON_RSTN/I2C7_SDA_M3/UART8_CTSN_M0/PWM15_IR_M1/CAN1_TX_M1/GPIO4_B3_U (io), AM27 CIF_D7/BT1120_D7/I2S1_SDI2_M0/PCIE30X2_WAKEN_M1/I2C5_SDA_M2/SPI2_CS0_M1/GPIO4_A7_D (io), AM29 CIF_D2/BT1120_D2/I2S1_LRCK_M0/PCIE30X1_1_PERSTN_M1/SPI0_CLK_M1/GPIO4_A2_D (io)
part K pins: AG9 USB20_HOST0_REXT (in), AG11 USB20_AVDD_1V8 (power), AH9 USB20_HOST1_REXT (in), AH10 USB20_DVDD_0V75 (power), AJ10 USB20_AVDD_3V3 (power), AK6 USB20_HOST0_DP (io), AK8 TYPEC1_USB20_OTG_ID (in), AK9 TYPEC1_USB20_OTG_DP (io), AL6 USB20_HOST0_DM (io), AL7 USB20_HOST1_DP (io), AL8 TYPEC1_USB20_VBUSDET (in), AL9 TYPEC1_USB20_OTG_DM (io), AL12 TYPEC0_USB20_OTG_DP (io), AL14 TYPEC0_USB20_OTG_ID (in), AM7 USB20_HOST1_DM (io), AM12 TYPEC0_USB20_OTG_DM (io), AM14 TYPEC0_USB20_VBUSDET (in), AP7 TYPEC1_USB20_OTG1_REXT (in), AP12 TYPEC0_USB20_OTG0_REXT (in)
part L pins: D28 I2S0_SDI0/GPIO1_D4_D (io), D29 PDM0_CLK0_M0/I2C4_SDA_M4/PWM15_IR_M2/GPIO1_C6_D (io), D30 I2S0_LRCK/I2C2_SCL_M3/UART4_RTSN/GPIO1_C5_D (io), E28 I2S0_SDI1/PDM0_SDI3_M0/I2C1_SDA_M4/UART4_RX_M0/PWM1_M1/SPI1_CS0_M2/GPIO1_D3_D (io), E29 I2S0_SDO0/I2C4_SCL_M4/UART4_CTSN/GPIO1_C7_D (io), E30 PDM0_CLK1_M0/I2C2_SDA_M3/PWM11_IR_M2/SPI4_CS1_M0/GPIO1_C4_D (io), E31 I2S0_SCLK/I2C6_SCL_M1/UART3_CTSN/PWM7_IR_M2/SPI4_CS0_M0/GPIO1_C3_D (io), F26 I2S0_SDO1/I2C7_SCL_M0/UART6_TX_M2/SPI1_MISO_M2/GPIO1_D0_D (io), F27 I2S0_SDO2/I2S0_SDI3/PDM0_SDI1_M0/I2C7_SDA_M0/UART6_RX_M2/SPI1_MOSI_M2/GPIO1_D1_D (io), F28 I2S0_SDO3/I2S0_SDI2/PDM0_SDI2_M0/I2C1_SCL_M4/UART4_TX_M0/PWM0_M1/SPI1_CLK_M2/GPIO1_D2_D (io), F30 I2S0_MCLK/I2C6_SDA_M1/UART3_RTSN/PWM3_IR_M2/SPI4_CLK_M0/GPIO1_C2_D (io), G20 VCCIO1_1V8 (power), G26 PDM0_SDI0_M0/SPI1_CS1_M2/GPIO1_D5_D (io), G27 I2C3_SCL_M0/UART3_TX_M0/SPI4_MOSI_M0/GPIO1_C1_Z (io), G29 I2C3_SDA_M0/UART3_RX_M0/SPI4_MISO_M0/GPIO1_C0_Z (io)
part M pins: AA27 HDMI_TX0_HPD_M1/PCIE30X2_PERSTN_M2/HDMI_RX_HPDOUT_M1/MCU_JTAG_TCK_M1/UART9_RX_M2/SPI0_CS0_M3/GPIO3_D4_D (io), AA28 GMAC1_PTP_REF_CLK/HDMI_TX1_HPD_M1/I2C3_SCL_M1/SPI1_MOSI_M1/GPIO3_B7_D (io), AA29 GMAC1_TXD2/SDIO_D0_M1/I2S3_MCLK/FSPI_D0_M2/I2C6_SDA_M4/PWM10_M0/SPI4_MISO_M1/GPIO3_A0_U (io), AA30 GMAC1_TXD3/SDIO_D1_M1/I2S3_SCLK/AUDDSM_LN/FSPI_D1_M2/I2C6_SCL_M4/PWM11_IR_M0/SPI4_MOSI_M1/GPIO3_A1_U (io), AB28 PCIE30X4_BUTTON_RSTN/DP1_HPDIN_M0/MCU_JTAG_TMS_M1/UART9_TX_M2/PWM11_IR_M3/SPI0_CS1_M3/GPIO3_D5_D (io), AC28 GMAC1_TXD0/I2S2_SDO_M1/UART2_RTSN/GPIO3_B3_U (io), AC29 GMAC1_TXD1/I2S2_MCLK_M1/UART2_CTSN/GPIO3_B4_U (io), AD27 GMAC1_RXD2/SDIO_D2_M1/I2S3_LRCK/AUDDSM_LP/FSPI_D2_M2/UART8_TX_M1/SPI4_CLK_M1/GPIO3_A2_U (io), AD28 GMAC1_TXCLK/SDIO_CMD_M1/I2S3_SDI/AUDDSM_RP/UART8_RTSN_M1/SPI4_CS1_M1/GPIO3_A4_D (io), AD29 GMAC1_TXEN/I2S2_SCLK_M1/CAN1_RX_M0/UART3_TX_M1/PWM12_M0/GPIO3_B5_U (io), AE27 GMAC1_RXD3/SDIO_D3_M1/I2S3_SDO/AUDDSM_RN/FSPI_D3_M2/UART8_RX_M1/SPI4_CS0_M1/GPIO3_A3_U (io), AE28 GMAC1_TXER/I2S2_SDI_M1/UART2_RX_M2/PWM3_IR_M1/GPIO3_B2_D (io), AE29 GMAC1_MCLKINOUT/I2S2_LRCK_M1/CAN1_TX_M0/UART3_RX_M1/PWM13_M0/GPIO3_B6_D (io), AG23 CIF_D13/PCIE20X1_2_PERSTN_M0/HDMI_RX_CEC_M1/UART4_TX_M1/PWM9_M2/SPI0_MISO_M3/GPIO3_D1_D (io), AG24 CIF_D15/PCIE30X2_WAKEN_M2/HDMI_RX_SDA_M1/I2C7_SDA_M2/UART9_CTSN_M2/PWM10_M2/SPI0_CLK_M3/GPIO3_D3_D (io), AG25 CIF_D14/PCIE30X2_CLKREQN_M2/HDMI_RX_SCL_M1/I2C7_SCL_M2/UART9_RTSN_M2/SPI0_MOSI_M3/GPIO3_D2_D (io), AG26 CIF_D10/PCIE30X4_PERSTN_M2/HDMI_TX1_SCL_M1/SPI3_MISO_M3/GPIO3_C6_U (io), AG28 GMAC1_RXD1/MIPI_CAMERA3_CLK_M1/PWM9_M0/GPIO3_B0_U (io), AG29 GMAC1_RXD0/MIPI_CAMERA2_CLK_M1/PWM8_M0/GPIO3_A7_U (io), AH24 CIF_D12/PCIE20X1_2_WAKEN_M0/HDMI_TX0_SDA_M2/I2C5_SDA_M0/UART4_RX_M1/PWM8_M2/SPI3_CLK_M3/GPIO3_D0_U (io), AH25 CIF_D9/FSPI_CS1N_M2/PCIE30X4_WAKEN_M2/HDMI_TX1_SDA_M1/CAN2_TX_M0/UART5_RX_M1/SPI3_CS1_M3/GPIO3_C5_U (io), AH26 CIF_D8/FSPI_CS0N_M2/PCIE30X4_CLKREQN_M2/HDMI_TX1_CEC_M2/CAN2_RX_M0/UART5_TX_M1/SPI3_CS0_M3/GPIO3_C4_U (io), AH27 ETH1_REFCLKO_25M/MIPI_CAMERA1_CLK_M1/I2C4_SCL_M0/GPIO3_A6_D (io), AH29 GMAC1_RXDV_CRS/MIPI_CAMERA4_CLK_M1/UART2_TX_M2/PWM2_M1/GPIO3_B1_D (io), AH30 GMAC1_RXCLK/SDIO_CLK_M1/MIPI_CAMERA0_CLK_M1/FSPI_CLK_M2/I2C4_SDA_M0/UART8_CTSN_M1/GPIO3_A5_D (io), AJ24 CIF_D11/PCIE20X1_2_CLKREQN_M0/HDMI_TX0_SCL_M2/I2C5_SCL_M0/SPI3_MOSI_M3/GPIO3_C7_U (io), W25 VCCIO5_1V8 (power), W26 VCCIO5 (power), Y27 GMAC1_PPSCLK/PCIE30X2_BUTTON_RSTN/UART7_RX_M1/SPI1_CLK_M1/GPIO3_C1_D (io), Y29 GMAC1_PPSTRIG/I2C3_SDA_M1/UART7_TX_M1/SPI1_MISO_M1/GPIO3_C0_D (io), Y30 GMAC1_MDIO/MIPI_TE1/I2C8_SDA_M4/UART7_CTSN_M1/PWM15_IR_M0/SPI1_CS1_M1/GPIO3_C3_D (io), Y31 GMAC1_MDC/MIPI_TE0/I2C8_SCL_M4/UART7_RTSN_M1/PWM14_M0/SPI1_CS0_M1/GPIO3_C2_D (io)
part N pins: G30 PCIE20_2_REFCLKN (io), G31 PCIE20_2_REFCLKP (io), H29 PCIE20_2_TXN/SATA30_2_TXN/USB30_2_SSTXN (out), H30 PCIE20_2_TXP/SATA30_2_TXP/USB30_2_SSTXP (out), H32 PCIE20_1_REFCLKP (io), H33 PCIE20_1_REFCLKN (io), J30 PCIE20_2_RXN/SATA30_2_RXN/USB30_2_SSRXN (in), J31 PCIE20_2_RXP/SATA30_2_RXP/USB30_2_SSRXP (in), J33 PCIE20_1_RXP/SATA30_1_RXP (in), J34 PCIE20_1_RXN/SATA30_1_RXN (in), K27 PCIE20_SATA30_USB30_2_AVDD_1V8 (power), K28 PCIE20_SATA30_USB30_2_AVDD_0V85 (power), K33 PCIE20_1_TXP/SATA30_1_TXP (out), K34 PCIE20_1_TXN/SATA30_1_TXN (out), L27 PCIE20_SATA30_1_AVDD_1V8 (power), L28 PCIE20_SATA30_1_AVDD_0V85 (power), L32 PCIE20_0_REFCLKP (io), L33 PCIE20_0_REFCLKN (io), M27 PCIE20_SATA30_0_AVDD_1V8 (power), M28 PCIE20_SATA30_0_AVDD_0V85 (power), M33 PCIE20_0_TXN/SATA30_0_TXN (out), M34 PCIE20_0_TXP/SATA30_0_TXP (out), N33 PCIE20_0_RXP/SATA30_0_RXP (in), N34 PCIE20_0_RXN/SATA30_0_RXN (in)
part O pins: AG13 TYPEC1_DP1_VDDH_1V8 (power), AG14 TYPEC0_DP0_VDDH_1V8 (power), AG16 TYPEC1_DP1_REXT (in), AH13 TYPEC1_DP1_VDD_0V85 (power), AH14 TYPEC0_DP0_VDDA_0V85 (power), AH16 TYPEC0_DP0_REXT (in), AJ13 TYPEC1_DP1_VDDA_0V85 (power), AJ14 TYPEC0_DP0_VDD_0V85 (power), AL10 TYPEC1_SBU1/DP1_AUXP (io), AL15 TYPEC0_SBU1/DP0_AUXP (io), AM10 TYPEC1_SBU2/DP1_AUXN (io), AM15 TYPEC0_SBU2/DP0_AUXN (io), AN8 TYPEC1_SSRX1P/DP1_TX0P (io), AN9 TYPEC1_SSTX1N/DP1_TX1N (out), AN10 TYPEC1_SSRX2P/DP1_TX2P (io), AN11 TYPEC1_SSTX2N/DP1_TX3N (out), AN13 TYPEC0_SSRX1P/DP0_TX0P (io), AN14 TYPEC0_SSTX1N/DP0_TX1N (out), AN15 TYPEC0_SSRX2P/DP0_TX2P (io), AN16 TYPEC0_SSTX2N/DP0_TX3N (out), AP8 TYPEC1_SSRX1N/DP1_TX0N (io), AP9 TYPEC1_SSTX1P/DP1_TX1P (out), AP10 TYPEC1_SSRX2N/DP1_TX2N (io), AP11 TYPEC1_SSTX2P/DP1_TX3P (out), AP13 TYPEC0_SSRX1N/DP0_TX0N (io), AP14 TYPEC0_SSTX1P/DP0_TX1P (out), AP15 TYPEC0_SSRX2N/DP0_TX2N (io), AP16 TYPEC0_SSTX2P/DP0_TX3P (out)
part P pins: AF19 MIPI_D/C_PHY1_VREG (in), AG19 MIPI_D/C_PHY1_VDD (power), AH19 MIPI_D/C_PHY1_VDD_1V2 (power), AJ19 MIPI_D/C_PHY1_VDD_1V8 (power), AK18 MIPI_DPHY1_RX_D0P/MIPI_CPHY1_RX_TRIO0_B (in), AK19 MIPI_DPHY1_RX_D1P/MIPI_CPHY1_RX_TRIO1_A (in), AK20 MIPI_DPHY1_RX_CLKP/MIPI_CPHY1_RX_TRIO1_C (in), AK21 MIPI_DPHY1_RX_D2P/MIPI_CPHY1_RX_TRIO2_B (in), AK22 MIPI_DPHY1_RX_D3P/NO_USE (in), AL18 MIPI_DPHY1_RX_D0N/MIPI_CPHY1_RX_TRIO0_A (in), AL19 MIPI_DPHY1_RX_D1N/MIPI_CPHY1_RX_TRIO0_C (in), AL20 MIPI_DPHY1_RX_CLKN/MIPI_CPHY1_RX_TRIO1_B (in), AL21 MIPI_DPHY1_RX_D2N/MIPI_CPHY1_RX_TRIO2_A (in), AL22 MIPI_DPHY1_RX_D3N/MIPI_CPHY1_RX_TRIO2_C (in), AN18 MIPI_DPHY1_TX_D0P/MIPI_CPHY1_TX_TRIO0_B (out), AN19 MIPI_DPHY1_TX_D1P/MIPI_CPHY1_TX_TRIO1_A (out), AN20 MIPI_DPHY1_TX_CLKP/MIPI_CPHY1_TX_TRIO1_C (out), AN21 MIPI_DPHY1_TX_D2P/MIPI_CPHY1_TX_TRIO2_B (out), AN22 MIPI_DPHY1_TX_D3P/NO_USE (out), AP18 MIPI_DPHY1_TX_D0N/MIPI_CPHY1_TX_TRIO0_A (out), AP19 MIPI_DPHY1_TX_D1N/MIPI_CPHY1_TX_TRIO0_C (out), AP20 MIPI_DPHY1_TX_CLKN/MIPI_CPHY1_TX_TRIO1_B (out), AP21 MIPI_DPHY1_TX_D2N/MIPI_CPHY1_TX_TRIO2_A (out), AP22 MIPI_DPHY1_TX_D3N/MIPI_CPHY1_TX_TRIO2_C (out)
part Q pins: AD3 OTP_VDDOTP_0V75 (power), AD4 NC (power), AF18 TSADC_TEST_OUT_TS (power), AH18 SARADC_AVDD_1V8 (power), AK15 SARADC_IN5 (in), AK16 SARADC_IN2 (in), AK17 SARADC_IN7 (in), AL16 SARADC_IN1 (in), AL17 SARADC_IN6 (in), AM16 SARADC_IN0_BOOT (in), AM17 SARADC_IN4 (in), AN17 SARADC_IN3 (in)
part R pins: A28 PCIE30_PORT1_REF_CLKP (in), A30 PCIE30_PORT1_TX0N (out), A32 PCIE30_PORT1_RX0N (in), A33 PCIE30_PORT1_RESREF (in), B28 PCIE30_PORT1_REF_CLKN (in), B29 PCIE30_PORT1_TX1N (out), B30 PCIE30_PORT1_TX0P (out), B31 PCIE30_PORT1_RX1N (in), B32 PCIE30_PORT1_RX0P (in), B34 PCIE30_PORT0_RESREF (in), C29 PCIE30_PORT1_TX1P (out), C31 PCIE30_PORT1_RX1P (in), C33 PCIE30_PORT0_TX1P (out), C34 PCIE30_PORT0_TX1N (out), D32 PCIE30_PORT0_TX0P (out), D33 PCIE30_PORT0_TX0N (out), E33 PCIE30_PORT0_REF_CLKP (in), E34 PCIE30_PORT0_REF_CLKN (in), F32 PCIE30_PORT0_RX1P (in), F33 PCIE30_PORT0_RX1N (in), G23 PCIE30_PORT0_AVDD1V8 (power), G24 PCIE30_PORT0_AVDD0V75 (power), G33 PCIE30_PORT0_RX0P (in), G34 PCIE30_PORT0_RX0N (in), H23 PCIE30_PORT1_AVDD1V8 (power), H24 PCIE30_PORT1_AVDD0V75 (power)
part S pins: AA25 MIPI_CSI1_AVCC0V75 (power), AA26 MIPI_CSI1_AVCC1V8 (power), AB25 MIPI_CSI0_AVCC0V75 (power), AB26 MIPI_CSI0_AVCC1V8 (power), AG31 MIPI_CSI1_D0P (in), AG32 MIPI_CSI1_D0N (in), AG33 MIPI_CSI0_D0P (in), AG34 MIPI_CSI0_D0N (in), AH31 MIPI_CSI1_D1P (in), AH32 MIPI_CSI1_D1N (in), AH33 MIPI_CSI0_D1P (in), AH34 MIPI_CSI0_D1N (in), AJ31 MIPI_CSI1_CLK0P (in), AJ32 MIPI_CSI1_CLK0N (in), AJ33 MIPI_CSI0_CLK0P (in), AJ34 MIPI_CSI0_CLK0N (in), AK31 MIPI_CSI1_D2P (in), AK32 MIPI_CSI1_D2N (in), AK33 MIPI_CSI0_D2P (in), AK34 MIPI_CSI0_D2N (in), AL31 MIPI_CSI1_D3P (in), AL32 MIPI_CSI1_D3N (in), AL33 MIPI_CSI0_D3P (in), AL34 MIPI_CSI0_D3N (in), AM31 MIPI_CSI1_CLK1P (in), AM32 MIPI_CSI1_CLK1N (in), AM33 MIPI_CSI0_CLK1P (in), AM34 MIPI_CSI0_CLK1N (in)
part T pins: AF20 MIPI_D/C_PHY0_VREG (in), AG20 MIPI_D/C_PHY0_VDD (power), AH20 MIPI_D/C_PHY0_VDD_1V2 (power), AJ20 MIPI_D/C_PHY0_VDD_1V8 (power), AN24 MIPI_DPHY0_TX_D0P/MIPI_CPHY0_TX_TRIO0_B (out), AN25 MIPI_DPHY0_TX_D1P/MIPI_CPHY0_TX_TRIO1_A (out), AN26 MIPI_DPHY0_TX_CLKP/MIPI_CPHY0_TX_TRIO1_C (out), AN27 MIPI_DPHY0_TX_D2P/MIPI_CPHY0_TX_TRIO2_B (out), AN28 MIPI_DPHY0_TX_D3P/NO_USE (out), AN29 MIPI_DPHY0_RX_D0P/MIPI_CPHY0_RX_TRIO0_B (in), AN30 MIPI_DPHY0_RX_D1P/MIPI_CPHY0_RX_TRIO1_A (in), AN32 MIPI_DPHY0_RX_CLKP/MIPI_CPHY0_RX_TRIO1_C (in), AN33 MIPI_DPHY0_RX_D2P/MIPI_CPHY0_RX_TRIO2_B (in), AN34 MIPI_DPHY0_RX_D3P/NO_USE (in), AP24 MIPI_DPHY0_TX_D0N/MIPI_CPHY0_TX_TRIO0_A (out), AP25 MIPI_DPHY0_TX_D1N/MIPI_CPHY0_TX_TRIO0_C (out), AP26 MIPI_DPHY0_TX_CLKN/MIPI_CPHY0_TX_TRIO1_B (out), AP27 MIPI_DPHY0_TX_D2N/MIPI_CPHY0_TX_TRIO2_A (out), AP28 MIPI_DPHY0_TX_D3N/MIPI_CPHY0_TX_TRIO2_C (out), AP29 MIPI_DPHY0_RX_D0N/MIPI_CPHY0_RX_TRIO0_A (in), AP30 MIPI_DPHY0_RX_D1N/MIPI_CPHY0_RX_TRIO0_C (in), AP31 MIPI_DPHY0_RX_CLKN/MIPI_CPHY0_RX_TRIO1_B (in), AP32 MIPI_DPHY0_RX_D2N/MIPI_CPHY0_RX_TRIO2_A (in), AP33 MIPI_DPHY0_RX_D3N/MIPI_CPHY0_RX_TRIO2_C (in)
part U pins: AA8 AVSS_15 (power), AA10 AVSS_16 (power), AB6 AVSS_17 (power), AB7 AVSS_18 (power), AB8 AVSS_19 (power), AB10 AVSS_20 (power), AC5 AVSS_21 (power), AC8 AVSS_22 (power), AC10 AVSS_23 (power), AD5 AVSS_24 (power), AD8 AVSS_25 (power), AD10 AVSS_26 (power), AE6 AVSS_27 (power), AE7 AVSS_28 (power), AE9 AVSS_29 (power), AF4 AVSS_30 (power), AF7 AVSS_31 (power), AF8 AVSS_32 (power), AF11 AVSS_33 (power), AF12 AVSS_34 (power), AF13 AVSS_35 (power), AF14 AVSS_36 (power), AF15 AVSS_37 (power), AF16 AVSS_38 (power), AF21 AVSS_39 (power), AG3 AVSS_40 (power), AG6 AVSS_41 (power), AG7 AVSS_42 (power), AG10 AVSS_43 (power), AG12 AVSS_44 (power), AG15 AVSS_45 (power), AG18 AVSS_46 (power), AG21 AVSS_47 (power), AG22 AVSS_48 (power), AH4 AVSS_49 (power), AH8 AVSS_50 (power), AH11 AVSS_51 (power), AH12 AVSS_52 (power), AH15 AVSS_53 (power), AH21 AVSS_54 (power), AH22 AVSS_55 (power), AH23 AVSS_56 (power), AJ3 AVSS_57 (power), AJ7 AVSS_58 (power), AJ8 AVSS_59 (power), AJ9 AVSS_60 (power), AJ11 AVSS_61 (power), AJ12 AVSS_62 (power), AJ15 AVSS_63 (power), AJ16 AVSS_64 (power), AJ18 AVSS_65 (power), AJ21 AVSS_66 (power), AJ22 AVSS_67 (power), AJ23 AVSS_68 (power), AK4 AVSS_69 (power), AK5 AVSS_70 (power), AK7 AVSS_71 (power), AK10 AVSS_72 (power), AK11 AVSS_73 (power), AK12 AVSS_74 (power), AK13 AVSS_75 (power), AK14 AVSS_76 (power), AK23 AVSS_77 (power), AL3 AVSS_78 (power), AL4 AVSS_79 (power), AL5 AVSS_80 (power), AL11 AVSS_81 (power), AL13 AVSS_82 (power), AL23 AVSS_83 (power), AM4 AVSS_84 (power), AM8 AVSS_85 (power), AM9 AVSS_86 (power), AM18 AVSS_87 (power), AM20 AVSS_88 (power), AM22 AVSS_89 (power), AM23 AVSS_90 (power), H28 AVSS_1 (power), H31 AVSS_2 (power), J27 AVSS_3 (power), J28 AVSS_4 (power), J29 AVSS_5 (power), J32 AVSS_6 (power), K26 AVSS_7 (power), K31 AVSS_8 (power), K32 AVSS_9 (power), L26 AVSS_10 (power), L31 AVSS_11 (power), M26 AVSS_12 (power), M32 AVSS_13 (power), N32 AVSS_14 (power)
part V pins: AA12 VDD_GPU_MEM_0 (power), AA13 VDD_GPU_0 (power), AA14 VDD_GPU_7 (power), AA15 VDD_GPU_11 (power), AB12 VDD_GPU_MEM_1 (power), AB13 VDD_GPU_1 (power), AB14 VDD_GPU_6 (power), AB15 VDD_GPU_10 (power), AB21 VDD_NPU_6 (power), AB22 VDD_NPU_5 (power), AB23 VDD_NPU_2 (power), AC13 VDD_GPU_2 (power), AC14 VDD_GPU_5 (power), AC15 VDD_GPU_9 (power), AC17 VDD_LOGIC_5 (power), AC18 VDD_LOGIC_4 (power), AC19 VDD_LOGIC_3 (power), AC22 VDD_NPU_4 (power), AC23 VDD_NPU_1 (power), AD13 VDD_GPU_3 (power), AD14 VDD_GPU_4 (power), AD15 VDD_GPU_8 (power), AD17 VDD_LOGIC_0 (power), AD18 VDD_LOGIC_1 (power), AD19 VDD_LOGIC_2 (power), AD22 VDD_NPU_3 (power), AD23 VDD_NPU_0 (power), AE22 VDD_NPU_MEM_0 (power), AE23 VDD_NPU_MEM_1 (power), K19 VDD_LOGIC_8 (power), K20 VDD_LOGIC_9 (power), K23 VDD_CPU_BIG1_9 (power), K24 VDD_CPU_BIG1_0 (power), L23 VDD_CPU_BIG1_8 (power), L24 VDD_CPU_BIG1_1 (power), M16 VDD_CPU_BIG0_0 (power), M17 VDD_CPU_BIG0_9 (power), M19 VDD_CPU_BIG0_MEM_0 (power), M21 VDD_CPU_BIG1_MEM_0 (power), M23 VDD_CPU_BIG1_7 (power), M24 VDD_CPU_BIG1_2 (power), N16 VDD_CPU_BIG0_1 (power), N17 VDD_CPU_BIG0_8 (power), N19 VDD_CPU_BIG0_MEM_1 (power), N21 VDD_CPU_BIG1_MEM_1 (power), N23 VDD_CPU_BIG1_6 (power), N24 VDD_CPU_BIG1_3 (power), P16 VDD_CPU_BIG0_2 (power), P17 VDD_CPU_BIG0_7 (power), P23 VDD_CPU_BIG1_5 (power), P24 VDD_CPU_BIG1_4 (power), R14 VDD_VDENC_0 (power), R16 VDD_CPU_BIG0_3 (power), R17 VDD_CPU_BIG0_6 (power), T14 VDD_VDENC_1 (power), T16 VDD_CPU_BIG0_4 (power), T17 VDD_CPU_BIG0_5 (power), T21 VDD_CPU_LIT_MEM_1 (power), T22 VDD_CPU_LIT_MEM_0 (power), U14 VDD_VDENC_2 (power), U21 VDD_CPU_LIT_7 (power), U22 VDD_CPU_LIT_0 (power), V12 VDD_VDENC_MEM_0 (power), V13 VDD_VDENC_MEM_1 (power), V14 VDD_VDENC_3 (power), V16 VDD_LOGIC_6 (power), V17 VDD_LOGIC_7 (power), V21 VDD_CPU_LIT_6 (power), V22 VDD_CPU_LIT_1 (power), W13 VDD_VDENC_5 (power), W14 VDD_VDENC_4 (power), W21 VDD_CPU_LIT_5 (power), W22 VDD_CPU_LIT_2 (power), Y21 VDD_CPU_LIT_4 (power), Y22 VDD_CPU_LIT_3 (power)
part W pins: A1 VSS_1 (power), A11 VSS_2 (power), A14 VSS_3 (power), A34 VSS_4 (power), B6 VSS_5 (power), B19 VSS_6 (power), B24 VSS_7 (power), B27 VSS_8 (power), B33 VSS_9 (power), C3 VSS_10 (power), C4 VSS_11 (power), C5 VSS_12 (power), C6 VSS_13 (power), C7 VSS_14 (power), C8 VSS_15 (power), C9 VSS_16 (power), C10 VSS_17 (power), C11 VSS_18 (power), C12 VSS_19 (power), C13 VSS_20 (power), C14 VSS_21 (power), C15 VSS_22 (power), C16 VSS_23 (power), C17 VSS_24 (power), C18 VSS_25 (power), C20 VSS_26 (power), C21 VSS_27 (power), C22 VSS_28 (power), C23 VSS_29 (power), C26 VSS_30 (power), C28 VSS_31 (power), C30 VSS_32 (power), C32 VSS_33 (power), D3 VSS_34 (power), D23 VSS_35 (power), D24 VSS_36 (power), D31 VSS_37 (power), E3 VSS_38 (power), E6 VSS_39 (power), E8 VSS_40 (power), E12 VSS_41 (power), E18 VSS_42 (power), E20 VSS_43 (power), E22 VSS_44 (power), E23 VSS_45 (power), E32 VSS_46 (power), F3 VSS_47 (power), F7 VSS_48 (power), F9 VSS_49 (power), F10 VSS_50 (power), F11 VSS_51 (power), F13 VSS_52 (power), F14 VSS_53 (power), F15 VSS_54 (power), F16 VSS_55 (power), F19 VSS_56 (power), F20 VSS_57 (power), F21 VSS_58 (power), F22 VSS_59 (power), F23 VSS_60 (power), F31 VSS_61 (power), G3 VSS_62 (power), G6 VSS_63 (power), G10 VSS_64 (power), G15 VSS_65 (power), G19 VSS_66 (power), G21 VSS_67 (power), G22 VSS_68 (power), G25 VSS_69 (power), G32 VSS_70 (power), H3 VSS_71 (power), H6 VSS_72 (power), H10 VSS_73 (power), H12 VSS_74 (power), H14 VSS_75 (power), H19 VSS_76 (power), H22 VSS_77 (power), H25 VSS_78 (power), H26 VSS_79 (power), J3 VSS_80 (power), J4 VSS_81 (power), J5 VSS_82 (power), J6 VSS_83 (power), J10 VSS_84 (power), J11 VSS_85 (power), J12 VSS_86 (power), J13 VSS_87 (power), J14 VSS_88 (power), J15 VSS_89 (power), J16 VSS_90 (power), J18 VSS_91 (power), J19 VSS_92 (power), J20 VSS_93 (power), J21 VSS_94 (power)
part X pins: J22 VSS_95 (power), J23 VSS_96 (power), J24 VSS_97 (power), J25 VSS_98 (power), K3 VSS_99 (power), K6 VSS_100 (power), K8 VSS_101 (power), K9 VSS_102 (power), K18 VSS_103 (power), K21 VSS_104 (power), K22 VSS_105 (power), L1 VSS_106 (power)
part Y pins: L3 VSS_107 (power), L6 VSS_108 (power), L9 VSS_109 (power), L19 VSS_110 (power), L20 VSS_111 (power), L21 VSS_112 (power), L22 VSS_113 (power), L25 VSS_114 (power), M3 VSS_115 (power), M6 VSS_116 (power), M9 VSS_117 (power), M14 VSS_118 (power), M15 VSS_119 (power), M18 VSS_120 (power), M20 VSS_121 (power), M22 VSS_122 (power), M25 VSS_123 (power), N3 VSS_124 (power), N6 VSS_125 (power), N9 VSS_126 (power), N11 VSS_127 (power), N14 VSS_128 (power), N15 VSS_129 (power), N18 VSS_130 (power), N20 VSS_131 (power), N22 VSS_132 (power), N25 VSS_133 (power), N26 VSS_134 (power), N29 VSS_135 (power), P1 VSS_136 (power), P3 VSS_137 (power), P6 VSS_138 (power), P8 VSS_139 (power), P9 VSS_140 (power), P11 VSS_141 (power), P14 VSS_142 (power), P15 VSS_143 (power), P18 VSS_144 (power), P19 VSS_145 (power), P20 VSS_146 (power), P21 VSS_147 (power), P22 VSS_148 (power), P25 VSS_149 (power), P26 VSS_150 (power), P34 VSS_151 (power), R3 VSS_152 (power), R5 VSS_153 (power), R8 VSS_154 (power), R9 VSS_155 (power), R11 VSS_156 (power), R13 VSS_157 (power), R15 VSS_158 (power), R18 VSS_159 (power), R19 VSS_160 (power), R20 VSS_161 (power), R21 VSS_162 (power), R22 VSS_163 (power), R23 VSS_164 (power), R24 VSS_165 (power), R25 VSS_166 (power), R26 VSS_167 (power), R28 VSS_168 (power), R33 VSS_169 (power), T3 VSS_170 (power), T6 VSS_171 (power), T9 VSS_172 (power), T11 VSS_173 (power), T13 VSS_174 (power), T15 VSS_175 (power), T18 VSS_176 (power), T19 VSS_177 (power), T20 VSS_178 (power), T23 VSS_179 (power)
part Z pins: AA9 HDMI/EDP_TX0_VDD_0V75 (power), AB9 HDMI/EDP_TX0_AVDD_0V75 (power), AC6 HDMI/EDP_TX0_VDD_CMN_1V8 (power), AC7 HDMI/EDP_TX0_VDD_IO_1V8 (power), AC9 HDMI/EDP_TX1_AVDD_0V75 (power), AD6 HDMI/EDP_TX1_VDD_CMN_1V8 (power), AD7 HDMI/EDP_TX1_VDD_IO_1V8 (power), AD9 HDMI/EDP_TX1_VDD_0V75 (power), AG1 HDMI_TX0_SBDN/EDP_TX0_AUXN (io), AG2 HDMI_TX0_SBDP/EDP_TX0_AUXP (io), AH2 HDMI_TX0_D3N/EDP_TX0_D3N (out), AH3 HDMI_TX0_D3P/EDP_TX0_D3P (out), AJ1 HDMI_TX0_D0N/EDP_TX0_D0N (out), AJ2 HDMI_TX0_D0P/EDP_TX0_D0P (out), AK2 HDMI_TX0_D1N/EDP_TX0_D1N (out), AK3 HDMI_TX0_D1P/EDP_TX0_D1P (out), AL1 HDMI_TX0_D2N/EDP_TX0_D2N (out), AL2 HDMI_TX0_D2P/EDP_TX0_D2P (out), AM2 HDMI/EDP_TX0_REXT (in), AM3 HDMI_TX1_D3P/EDP_TX1_D3P (out), AM5 HDMI_TX1_D1P/EDP_TX1_D1P (out), AN1 HDMI/EDP_TX1_REXT (in), AN2 HDMI_TX1_SBDP/EDP_TX1_AUXP (io), AN3 HDMI_TX1_D3N/EDP_TX1_D3N (out), AN4 HDMI_TX1_D0P/EDP_TX1_D0P (out), AN5 HDMI_TX1_D1N/EDP_TX1_D1N (out), AN6 HDMI_TX1_D2P/EDP_TX1_D2P (out), AP2 HDMI_TX1_SBDN/EDP_TX1_AUXN (io), AP4 HDMI_TX1_D0N/EDP_TX1_D0N (out), AP6 HDMI_TX1_D2N/EDP_TX1_D2N (out)
part 27 pins: T24 VSS_180 (power), T25 VSS_181 (power), T26 VSS_182 (power), T27 VSS_183 (power), T33 VSS_184 (power), U3 VSS_185 (power), U12 VSS_186 (power), U13 VSS_187 (power), U15 VSS_188 (power), U16 VSS_189 (power), U17 VSS_190 (power), U20 VSS_191 (power), U23 VSS_192 (power), U24 VSS_193 (power), U30 VSS_194 (power), U31 VSS_195 (power), U34 VSS_196 (power), V3 VSS_197 (power), V4 VSS_198 (power), V5 VSS_199 (power), V8 VSS_200 (power), V9 VSS_201 (power), V10 VSS_202 (power), V11 VSS_203 (power), V15 VSS_204 (power), V18 VSS_205 (power), V19 VSS_206 (power), V23 VSS_207 (power), V24 VSS_208 (power), V25 VSS_209 (power), V27 VSS_210 (power), V30 VSS_211 (power), W2 VSS_212 (power)
part 28 pins: AA3 VSS_248 (power), AA6 VSS_249 (power), AA11 VSS_250 (power), AA16 VSS_251 (power), AA17 VSS_252 (power), AA18 VSS_253 (power), AA19 VSS_254 (power), AA20 VSS_255 (power), AA21 VSS_256 (power), AA22 VSS_257 (power), AA23 VSS_258 (power), AA24 VSS_259 (power), AA31 VSS_260 (power), AB3 VSS_261 (power), AB5 VSS_262 (power), AB11 VSS_263 (power), AB16 VSS_264 (power), AB17 VSS_265 (power), AB18 VSS_266 (power), AB19 VSS_267 (power), AB20 VSS_268 (power), AB24 VSS_269 (power), AB27 VSS_270 (power), W3 VSS_213 (power), W6 VSS_214 (power), W7 VSS_215 (power), W9 VSS_216 (power), W10 VSS_217 (power), W11 VSS_218 (power), W12 VSS_219 (power), W15 VSS_220 (power), W16 VSS_221 (power), W17 VSS_222 (power), W18 VSS_223 (power), W19 VSS_224 (power), W20 VSS_225 (power), W23 VSS_226 (power), W24 VSS_227 (power), W27 VSS_228 (power), Y3 VSS_229 (power), Y5 VSS_230 (power), Y6 VSS_231 (power), Y8 VSS_232 (power), Y9 VSS_233 (power), Y10 VSS_234 (power), Y11 VSS_235 (power), Y12 VSS_236 (power), Y13 VSS_237 (power), Y14 VSS_238 (power), Y15 VSS_239 (power), Y16 VSS_240 (power), Y17 VSS_241 (power), Y18 VSS_242 (power), Y19 VSS_243 (power), Y20 VSS_244 (power), Y23 VSS_245 (power), Y24 VSS_246 (power), Y28 VSS_247 (power)
part 29 pins: AB29 VSS_271 (power), AB32 VSS_272 (power), AC3 VSS_273 (power), AC4 VSS_274 (power), AC11 VSS_275 (power), AC12 VSS_276 (power), AC16 VSS_277 (power), AC20 VSS_278 (power), AC21 VSS_279 (power), AC24 VSS_280 (power), AC27 VSS_281 (power), AD11 VSS_282 (power), AD12 VSS_283 (power), AD16 VSS_284 (power), AD20 VSS_285 (power), AD21 VSS_286 (power), AD24 VSS_287 (power), AD25 VSS_288 (power), AD26 VSS_289 (power), AE3 VSS_290 (power), AE11 VSS_291 (power), AE12 VSS_292 (power), AE13 VSS_293 (power), AE14 VSS_294 (power), AE15 VSS_295 (power), AE16 VSS_296 (power), AE18 VSS_297 (power), AE19 VSS_298 (power), AE20 VSS_299 (power), AE21 VSS_300 (power), AE24 VSS_301 (power), AE26 VSS_302 (power), AF22 VSS_303 (power), AF24 VSS_304 (power), AF25 VSS_305 (power), AF27 VSS_306 (power), AF28 VSS_307 (power), AF29 VSS_308 (power), AF30 VSS_309 (power), AF31 VSS_310 (power), AF32 VSS_311 (power), AG30 VSS_312 (power), AJ30 VSS_313 (power), AK28 VSS_314 (power), AK29 VSS_315 (power), AL25 VSS_316 (power), AM30 VSS_317 (power)
part 30 pins: AM24 AVSS_91 (power), AM26 AVSS_92 (power), AM28 AVSS_93 (power), AN7 AVSS_94 (power), AN12 AVSS_95 (power), AN23 AVSS_96 (power), AN31 AVSS_97 (power), AP1 AVSS_98 (power), AP17 AVSS_99 (power), AP23 AVSS_100 (power), AP34 AVSS_101 (power)


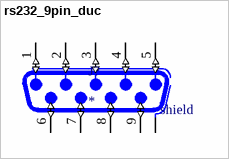
[diagram p102: symbol rs232_9pin_duc]

## rs232_9pin_duc
designator J?
6180XX231421_618009231421; MF: {'manufacturer': u'W\xfcrth Elektronik'}; Package: None; Price: None; Value: *; MP: 618009231421; Availability: Unavailable
footprint 618009231421
pins: 1 (io), 2 (io), 3 (io), 4 (io), 5 (io), 6 (io), 7 (io), 8 (io), 9 (io), S1 SHIELD (io), S2 SHIELD (io)
text: shield


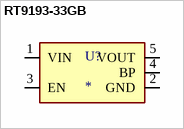
[diagram p103: symbol RT9193-33GB]

## RT9193-33GB
designator U?
Linear Voltage Regulator IC Positive Fixed 1 Output  300mA SOT-23-5; MF: Richtek Technology Corp; MP: RT919333GB; SnapEDA_Link: https://www.snapeda.com/parts/RT919333GB/Richtek/view-part/?ref=snap; Package: SOT-23-5 Richtek; Value: *; Check_prices: https://www.snapeda.com/parts/RT919333GB/Richtek/view-part/?ref=eda
footprint SOT23-5_TEXAS_INSTRUMETNS
pins: 1 VIN (io), 2 GND (io), 3 EN (io), 4 BP (io), 5 VOUT (io)


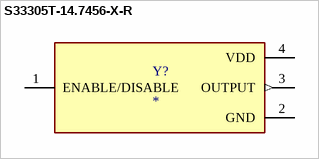
[diagram p104: symbol S33305T-14.7456-X-R]

## S33305T-14.7456-X-R
designator Y?
MP: S33305T-14.7456-X-R; Package: None; Price: None; Value: *; Availability: Unavailable
footprint OSC_S33305T-14.7456-X-R
pins: 1 ENABLE/DISABLE, 2 GND (power), 3 OUTPUT (out), 4 VDD (power)


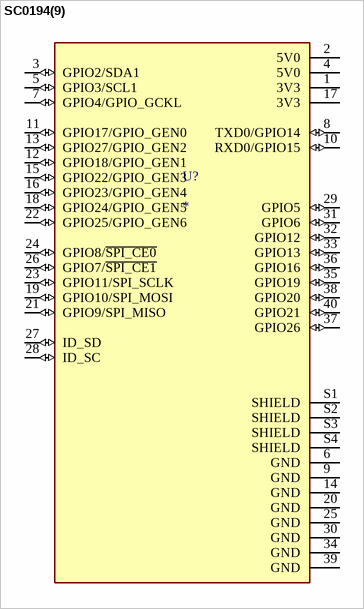
[diagram p105: symbol SC0194(9)]

## SC0194(9)
designator U?
The Raspberry Pi 4 Model B SC0194(9) single board computer features a Broadcom BCM2711 ARM Cortex-A72 quad-core processor operating at 1.5GHz, making it a powerful choice for embedded computing applications. Equipped with 4GB of RAM and a variety of conne; SnapEDA_Link: https://www.snapeda.com/parts/SC0194(9)/Raspberry+Pi/view-part/?ref=snap; Package: None; Value: *; MF: Raspberry Pi; MP: SC0194(9); Check_prices: https://www.snapeda.com/parts/SC0194(9)/Raspberry+Pi/view-part/?ref=eda
footprint MODULE_SC0194(9)
pins: 1 3V3 (power), 2 5V0 (power), 3 GPIO2/SDA1 (io), 4 5V0 (power), 5 GPIO3/SCL1 (io), 6 GND (power), 7 GPIO4/GPIO_GCKL (io), 8 TXD0/GPIO14 (io), 9 GND (power), 10 RXD0/GPIO15 (io), 11 GPIO17/GPIO_GEN0 (io), 12 GPIO18/GPIO_GEN1 (io), 13 GPIO27/GPIO_GEN2 (io), 14 GND (power), 15 GPIO22/GPIO_GEN3 (io), 16 GPIO23/GPIO_GEN4 (io), 17 3V3 (power), 18 GPIO24/GPIO_GEN5 (io), 19 GPIO10/SPI_MOSI (io), 20 GND (power), 21 GPIO9/SPI_MISO (io), 22 GPIO25/GPIO_GEN6 (io), 23 GPIO11/SPI_SCLK (io), 24 GPIO8/~{SPI_CE0} (io), 25 GND (power), 26 GPIO7/~{SPI_CE1} (io), 27 ID_SD (io), 28 ID_SC (io), 29 GPIO5 (io), 30 GND (power), 31 GPIO6 (io), 32 GPIO12 (io), 33 GPIO13 (io), 34 GND (power), 35 GPIO19 (io), 36 GPIO16 (io), 37 GPIO26 (io), 38 GPIO20 (io), 39 GND (power), 40 GPIO21 (io), S1 SHIELD (power), S2 SHIELD (power), S3 SHIELD (power), S4 SHIELD (power)


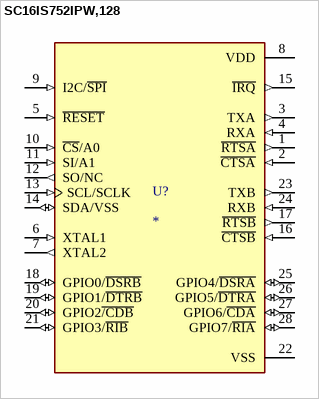
[diagram p106: symbol SC16IS752IPW,128]

## SC16IS752IPW,128
designator U?
RS232, RS485 Controller - IÂ²C, SPI, UART Interface 28-TSSOP; MF: NXP Semiconductors; MP: SC16IS752IPW,128; SnapEDA_Link: https://www.snapeda.com/parts/SC16IS752IPW,128/NXP+Semiconductors/view-part/?ref=snap; Package: TSSOP-28 NXP USA; Value: *; Check_prices: https://www.snapeda.com/parts/SC16IS752IPW,128/NXP+Semiconductors/view-part/?ref=eda
footprint SOP65P640X110-28N
pins: 1 ~{RTSA} (out), 2 ~{CTSA} (in), 3 TXA (out), 4 RXA (in), 5 ~{RESET} (in), 6 XTAL1 (in), 7 XTAL2 (out), 8 VDD (power), 9 I2C/~{SPI} (in), 10 ~{CS}/A0 (in), 11 SI/A1 (in), 12 SO/NC (out), 13 SCL/SCLK (in), 14 SDA/VSS (io), 15 ~{IRQ} (out), 16 ~{CTSB} (in), 17 ~{RTSB} (out), 18 GPIO0/~{DSRB} (io), 19 GPIO1/~{DTRB} (io), 20 GPIO2~{/CDB} (io), 21 GPIO3/~{RIB} (io), 22 VSS (power), 23 TXB (out), 24 RXB (in), 25 GPIO4/~{DSRA} (io), 26 GPIO5/~{DTRA} (io), 27 GPIO6/~{CDA} (io), 28 GPIO7/~{RIA} (io)


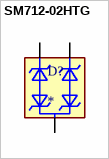
[diagram p107: symbol SM712-02HTG]

## SM712-02HTG
designator D?
TVS Diode, SM712 Series, 31V Clamp, 600W Peak Pulse, Surface Mount, SOT23-3 | Littelfuse SM712-02HTG; MF: Littelfuse Inc.; SnapEDA_Link: https://www.snapeda.com/parts/SM712-02HTG/Littelfuse/view-part/?ref=snap; Package: SOT-23 Littelfuse Inc.; Value: *; MP: SM712-02HTG; Check_prices: https://www.snapeda.com/parts/SM712-02HTG/Littelfuse/view-part/?ref=eda
footprint SOT23
pins: 1, 2, 3


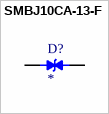
[diagram p108: symbol SMBJ10CA-13-F]

## SMBJ10CA-13-F
designator D?
MF: {'manufacturer': u'Diodes Incorporated'}; MP: SMBJ10CA-13-F; Package: None; Price: None; Value: *; Availability: Unavailable
footprint DIOM4336X265N
pins: 1, 2


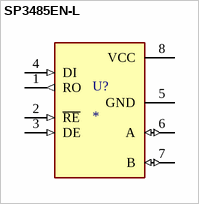
[diagram p109: symbol SP3485EN-L]

## SP3485EN-L
designator U?
1/1 Transceiver Half RS422, RS485 8-SOIC; MF: MaxLinear, Inc.; MP: SP3485EN-L; SnapEDA_Link: https://www.snapeda.com/parts/SP3485EN-L/MaxLinear/view-part/?ref=snap; Package: None; Value: *; Check_prices: https://www.snapeda.com/parts/SP3485EN-L/MaxLinear/view-part/?ref=eda
footprint SOIC127P599X175-8N
pins: 1 RO (out), 2 ~{RE} (in), 3 DE (in), 4 DI (in), 5 GND (power), 6 A (io), 7 B (io), 8 VCC (power)


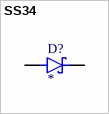
[diagram p110: symbol SS34]

## SS34
designator D?
3A, 40V, Schottky Rectifier; MF: Taiwan Semiconductor; MP: SS34; SnapEDA_Link: https://www.snapeda.com/parts/SS34/taiwan/view-part/?ref=snap; Package: DO-214AB-2 Taiwan Semiconductor; Value: *; Check_prices: https://www.snapeda.com/parts/SS34/taiwan/view-part/?ref=eda
footprint DIO_SS34
pins: A, C K


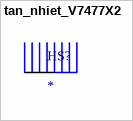
[diagram p111: symbol tan_nhiet_V7477X2]

## tan_nhiet_V7477X2
designator HS?
Extruded heatsink with solderpins - 11K/W - 38,1x35x12,7mm - black anodized - TOP-3, TO-220, SOT-32 retaining spring V03HK; MF: Assmann WSW Components; MP: V7477X2; SnapEDA_Link: https://www.snapeda.com/parts/V7477X2/Assmann+Electronics/view-part/?ref=snap; Package: None; Value: *; Check_prices: https://www.snapeda.com/parts/V7477X2/Assmann+Electronics/view-part/?ref=eda
footprint HSINK_V7477X2
pins: HS1 S, HS2 S


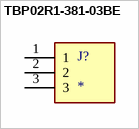
[diagram p112: symbol TBP02R1-381-03BE]

## TBP02R1-381-03BE
designator J?
2~24 Poles, Pluggable,Receptacle, Horizontal, 3.81 Pitch, Terminal Block Connector; MF: Same Sky; MP: TBP02R1-381-03BE; SnapEDA_Link: https://www.snapeda.com/parts/TBP02R1-381-03BE/Same+Sky/view-part/?ref=snap; Package: None; Value: *; Check_prices: https://www.snapeda.com/parts/TBP02R1-381-03BE/Same+Sky/view-part/?ref=eda
footprint CUI_TBP02R1-381-03BE
pins: 1, 2, 3


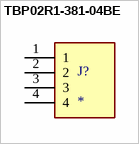
[diagram p113: symbol TBP02R1-381-04BE]

## TBP02R1-381-04BE
designator J?
2~24 Poles, Pluggable,Receptacle, Horizontal, 3.81 Pitch, Terminal Block Connector; MF: Same Sky; MP: TBP02R1-381-04BE; SnapEDA_Link: https://www.snapeda.com/parts/TBP02R1-381-04BE/Same+Sky/view-part/?ref=snap; Package: None; Value: *; Check_prices: https://www.snapeda.com/parts/TBP02R1-381-04BE/Same+Sky/view-part/?ref=eda
footprint CUI_TBP02R1-381-04BE
pins: 1, 2, 3, 4


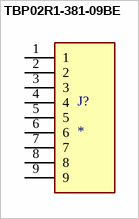
[diagram p114: symbol TBP02R1-381-09BE]

## TBP02R1-381-09BE
designator J?
2~24 Poles, Pluggable,Receptacle, Horizontal, 3.81 Pitch, Terminal Block Connector; MF: Same Sky; MP: TBP02R1-381-09BE; SnapEDA_Link: https://www.snapeda.com/parts/TBP02R1-381-09BE/Same+Sky/view-part/?ref=snap; Package: None; Value: *; Check_prices: https://www.snapeda.com/parts/TBP02R1-381-09BE/Same+Sky/view-part/?ref=eda
footprint CUI_TBP02R1-381-09BE
pins: 1, 2, 3, 4, 5, 6, 7, 8, 9
